# Altium schematic symbol library MicroProcessor.SchLib: 9 symbols (part 4 of 4)
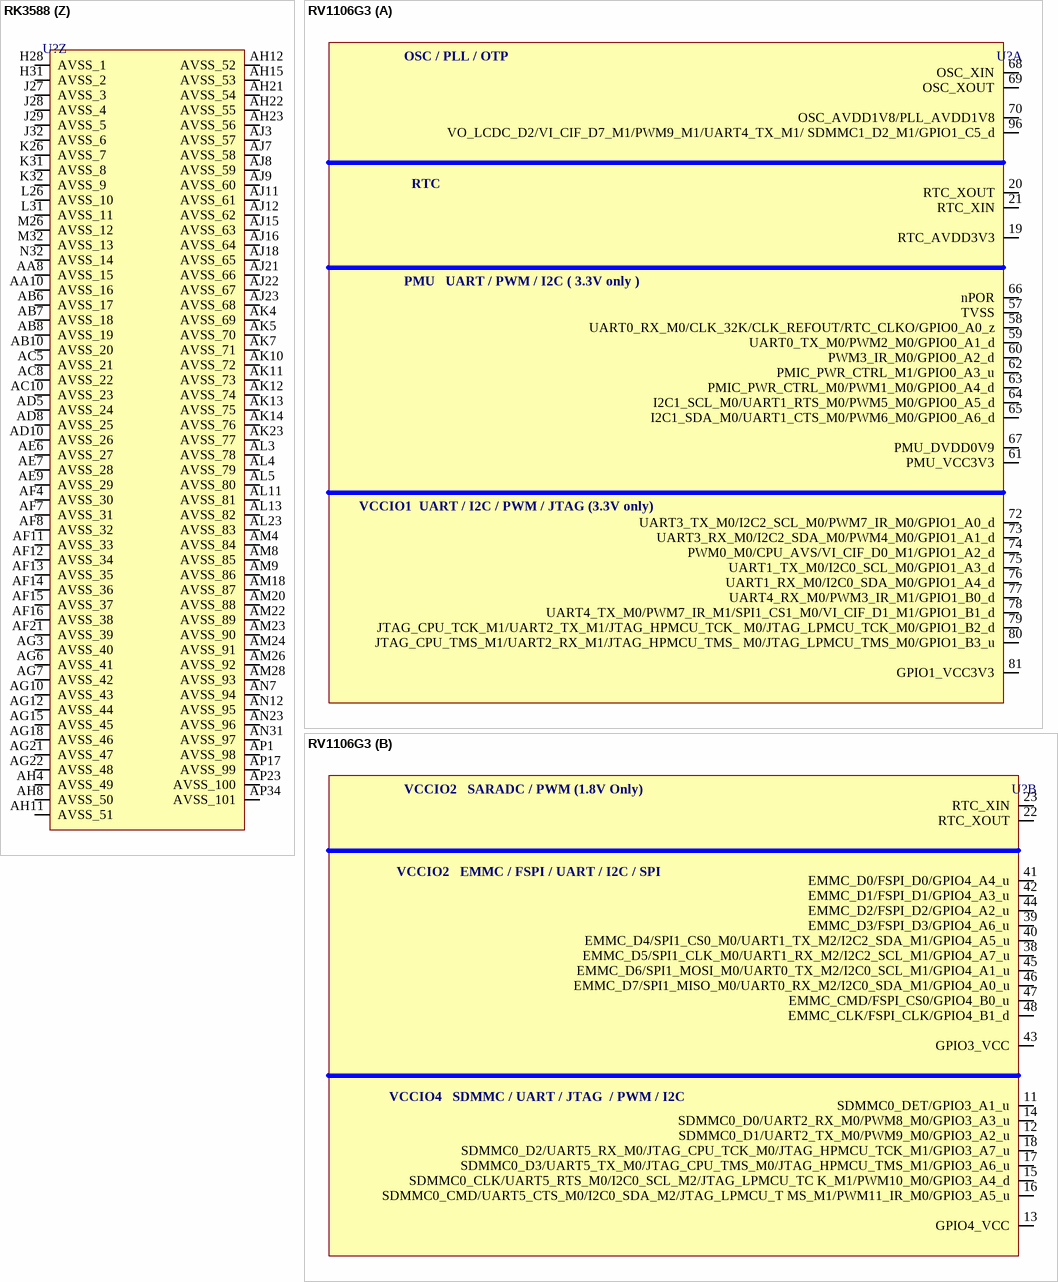
[diagram p32: symbols RK3588 to RV1106G3]

## RK3588
designator U?
Power Management IC; Manufacturer Part Number: RK3588LP4XEVB; Manufacturer: Rockchip; LCSC Part Number: *; Item Type: IC
footprint FCBGA-1088L
part A pins: AA1 DDR_CH0_DQ14_A, AA2 DDR_CH0_DQ15_A, AA4 DDR_CH0_DQS1N_A, AA5 DDR_CH0_DQS1P_A, AB1 DDR_CH0_DQ9_A, AB2 DDR_CH0_DQ8_A, AB4 DDR_CH0_DM1_A, AC1 DDR_CH0_DQ10_A, AC2 DDR_CH0_DQ11_A, B1       DDR_CH0_DQ11_B, C1       DDR_CH0_DQ9_B, C2       DDR_CH0_DQ10_B, D1       DDR_CH0_DQ15_B, D2       DDR_CH0_DQ8_B, E1       DDR_CH0_DQ13_B, E2       DDR_CH0_DQ14_B, E4 DDR_CH0_DM1_B, F1       DDR_CH0_DQ4_B, F2       DDR_CH0_DQ12_B, F4 DDR_CH0_DQS1N_B, F5 DDR_CH0_DQS1P_B, G1      DDR_CH0_DQ6_B, G2      DDR_CH0_DQ5_B, G4 DDR_CH0_DM0_B, H1       DDR_CH0_DQ0_B, H2       DDR_CH0_DQ7_B, H4 DDR_CH0_WCK1P_B, H5 DDR_CH0_WCK1N_B, H7 DDR_CH0_ZQ_B, J1       DDR_CH0_DQ2_B, J2       DDR_CH0_DQ1_B, J7 DDR_CH0_DQS0N_B, J8 DDR_CH0_DQS0P_B, K1 DDR_CH0_A4_B, K2       DDR_CH0_DQ3_B, K4 DDR_CH0_WCK0N_B, K5 DDR_CH0_WCK0P_B, K7 DDR_CH0_RESET_B, L2 DDR_CH0_A5_B, L4 DDR_CH0_LP4/4X_CKE1/LP5_CS1_B, L5 DDR_CH0_LP4/4X_CKE0/LP5_CS0_B, L7 DDR_CH0_LP4/4X_CS0_B, L8 DDR_CH0_LP4/4X_CS1_B, L10 DDR_CH0_VDDQ_CK, M1 DDR_CH0_CKB_B, M2 DDR_CH0_CK_B, M5 DDR_CH0_A1_B, M7 DDR_CH0_A6_B, M8 DDR_CH0_A0_B, M10 DDR_CH0_VDDQ_0, M11 DDR_CH0_PLL_AVSS, M12 DDR_CH0_PLL_AVDD1V8, N1 DDR_CH0_CKB_A, N2 DDR_CH0_CK_A, N4 DDR_CH0_A3_B, N5 DDR_CH0_A2_B, N7 DDR_CH0_LP4/4X_CKE1/LP5_CS1_A, N8 DDR_CH0_VDDQ_CKE, N10 DDR_CH0_VDDQ_1, N12 DDR_CH0_PLL_DVDD, N13 DDR_CH0_VDD_MIF_0, P2 DDR_CH0_A5_A, P4 DDR_CH0_A2_A, P5 DDR_CH0_A3_A, P7 DDR_CH0_LP4/4X_CKE0/LP5_CS0_A, P10 DDR_CH0_VDDQ_2, P12 DDR_CH0_VDD_3, P13 DDR_CH0_VDD_MIF_1, R1 DDR_CH0_A4_A, R2 DDR_CH0_DQ3_A, R6 DDR_CH0_LP4/4X_CS0_A, R7 DDR_CH0_LP4/4X_CS1_A, R10 DDR_CH0_VDDQ_3, R12 DDR_CH0_VDD_2, T1 DDR_CH0_DQ2_A, T2 DDR_CH0_DQ1_A, T4 DDR_CH0_RESET_A, T5 DDR_CH0_A6_A, T7 DDR_CH0_A0_A, T8 DDR_CH0_A1_A, T10 DDR_CH0_VDDQ_4, T12 DDR_CH0_VDD_1, U1 DDR_CH0_DQ0_A, U2 DDR_CH0_DQ7_A, U4 DDR_CH0_DQS0N_A, U5 DDR_CH0_DQS0P_A, U11 DDR_CH0_VDD_0, V1 DDR_CH0_DQ6_A, V2 DDR_CH0_DQ5_A, V6 DDR_CH0_WCK0N_A, V7 DDR_CH0_WCK0P_A, W1 DDR_CH0_DQ4_A, W4 DDR_CH0_WCK1P_A, W5 DDR_CH0_WCK1N_A, W8 DDR_CH0_ZQ_A, Y1 DDR_CH0_DQ12_A, Y2 DDR_CH0_DQ13_A, Y4 DDR_CH0_DM0_A 
part B pins: A2 DDR_CH1_DQ10_C, A3 DDR_CH1_DQ8_C, A4 DDR_CH1_DQ14_C, A5 DDR_CH1_DQ12_C, A6 DDR_CH1_DQ4_C, A7 DDR_CH1_DQ6_C, A8 DDR_CH1_DQ0_C, A9 DDR_CH1_DQ2_C, A10 DDR_CH1_A4_C, A12 DDR_CH1_CKB_C, A13 DDR_CH1_CKB_D, A15 DDR_CH1_A4_D, A16 DDR_CH1_DQ2_D, A17 DDR_CH1_DQ0_D, A18 DDR_CH1_DQ6_D, A19 DDR_CH1_DQ4_D, A20 DDR_CH1_DQ12_D, A21 DDR_CH1_DQ14_D, A22 DDR_CH1_DQ8_D, A23 DDR_CH1_DQ10_D, B2 DDR_CH1_DQ11_C, B3 DDR_CH1_DQ9_C, B4 DDR_CH1_DQ15_C, B5 DDR_CH1_DQ13_C, B7 DDR_CH1_DQ5_C, B8 DDR_CH1_DQ7_C, B9 DDR_CH1_DQ1_C, B10 DDR_CH1_DQ3_C, B11 DDR_CH1_A5_C, B12 DDR_CH1_CK_C, B13 DDR_CH1_CK_D, B14 DDR_CH1_A5_D, B15 DDR_CH1_DQ3_D, B16 DDR_CH1_DQ1_D, B17 DDR_CH1_DQ7_D, B18 DDR_CH1_DQ5_D, B20 DDR_CH1_DQ13_D, B21 DDR_CH1_DQ15_D, B22 DDR_CH1_DQ9_D, B23 DDR_CH1_DQ11_D, C19 DDR_CH1_RESET_D, D4 DDR_CH1_DM1_C, D5 DDR_CH1_DQS1N_C, D7 DDR_CH1_WCK1P_C, D9 DDR_CH1_DQS0N_C, D10 DDR_CH1_A6_C, D11 DDR_CH1_LP4/4X_CKE0/LP5_CS0_C, D13 DDR_CH1_A3_C, D14 DDR_CH1_A6_D, D16 DDR_CH1_LP4/4X_CKE0/LP5_CS0_D, D17 DDR_CH1_WCK0N_D, D19 DDR_CH1_LP4/4X_CS1_D, D20 DDR_CH1_DM0_D, D21 DDR_CH1_DQS1P_D, D22 DDR_CH1_DM1_D, E5 DDR_CH1_DQS1P_C, E7 DDR_CH1_WCK1N_C, E9 DDR_CH1_DQS0P_C, E10 DDR_CH1_RESET_C, E11 DDR_CH1_LP4/4X_CKE1/LP5_CS1_C, E13 DDR_CH1_A2_C, E14 DDR_CH1_A3_D, E16 DDR_CH1_LP4/4X_CKE1/LP5_CS1_D, E17 DDR_CH1_WCK0P_D, E19 DDR_CH1_LP4/4X_CS0_D, E21 DDR_CH1_DQS1N_D, F8 DDR_CH1_DM0_C, F12 DDR_CH1_A1_C, F18 DDR_CH1_ZQ_D, G8 DDR_CH1_ZQ_C, G9 DDR_CH1_WCK0P_C, G11 DDR_CH1_LP4/4X_CS0_C, G12 DDR_CH1_A0_C, G13 DDR_CH1_A2_D, G14 DDR_CH1_A1_D, G16 DDR_CH1_DQS0N_D, G18 DDR_CH1_WCK1N_D, H9 DDR_CH1_WCK0N_C, H11 DDR_CH1_LP4/4X_CS1_C, H13 DDR_CH1_VDDQ_CKE, H15 DDR_CH1_A0_D, H16 DDR_CH1_DQS0P_D, H18 DDR_CH1_WCK1P_D, K11 DDR_CH1_VDDQ_1, K12 DDR_CH1_VDDQ_0, K13 DDR_CH1_VDDQ_2, K14 DDR_CH1_VDDQ_3, K15 DDR_CH1_VDDQ_4, K16 DDR_CH1_PLL_AVDD1V8, L11 DDR_CH1_VDD_0, L12 DDR_CH1_VDD_1, L13 DDR_CH1_VDD_2, L14 DDR_CH1_VDD_3, L15 DDR_CH1_PLL_DVDD, L16 DDR_CH1_PLL_AVSS, L17 DDR_CH1_VDD_MIF_0, L18 DDR_CH1_VDD_MIF_1, M13 DDR_CH1_VDDQ_CK
part C pins: AA32 EMMC_D5/I2C1_SDA_M3/UART5_TX_M2/GPIO2_D5_u, AA33 EMMC_D3/FSPI_D3_M0/GPIO2_D3_u, AA34 EMMC_RSTN/I2C2_SCL_M2/UART5_RTSN_M1/GPIO2_A3_d, V26 EMMCIO_1V8, V32 EMMC_D2/FSPI_D2_M0/GPIO2_D2_u, V33 EMMC_D7/FSPI_CS1N_M0/GPIO2_D7_u, V34 EMMC_CLKOUT/GPIO2_A1_d, W32 EMMC_D6/FSPI_CS0N_M0/GPIO2_D6_u, W33 EMMC_D1/FSPI_D1_M0/GPIO2_D1_u, W34 EMMC_CMD/FSPI_CLK_M0/GPIO2_A0_u, Y32 EMMC_D4/I2C1_SCL_M3/UART5_RX_M2/GPIO2_D4_u, Y33 EMMC_D0/FSPI_D0_M0/GPIO2_D0_u, Y34 EMMC_DATA_STROBE/I2C2_SDA_M2/UART5_CTSN_M1/GPIO2_A2_d
part D pins: AA7 VCCIO2_1V8, AD1 SDMMC_D1/PDM1_SDI2_M0/JTAG_TMS_M1/I2C3_SDA_M4/UART2_RX_M1/PWM9_M1/GPIO4_D1_u, AD2 SDMMC_D0/PDM1_SDI3_M0/JTAG_TCK_M1/I2C3_SCL_M4/UART2_TX_M1/PWM8_M1/GPIO4_D0_u, AE1 SDMMC_CLK/PDM1_CLK0_M0/TEST_CLKOUT_M0/MCU_JTAG_TMS_M0/CAN0_RX_M1/UART5_TX_M0/GPIO4_D5_d, AE2 SDMMC_CMD/PDM1_CLK1_M0/MCU_JTAG_TCK_M0/CAN0_TX_M1/UART5_RX_M0/PWM7_IR_M1/GPIO4_D4_u, AF1 SDMMC_D3/PDM1_SDI0_M0/JTAG_TMS_M0/I2C8_SDA_M0/UART5_RTSN_M0/PWM10_M1/GPIO4_D3_u, AF2 SDMMC_D2/PDM1_SDI1_M0/JTAG_TCK_M0/I2C8_SCL_M0/UART5_CTSN_M0/GPIO4_D2_u, Y7 VCCIO2
part E pins: K29 CLK32K_IN/CLK32K_OUT0/GPIO0_B2__u, K30 SPI2_CS0_M2/I2C1_SDA_M1/PWM5_M0/UART0_TX_M1/GPIO0_B1_z, L29 SPI2_MISO_M2/I2C0_SCL_M0/GPIO0_B3_z, L30 SPI2_CS1_M2/I2C1_SCL_M1/UART0_RX_M1/GPIO0_B0_z, M29 TVSS, M30 PMIC_INT_L/GPIO0_A7_u, M31 NPOR, N27 OSC_1V8, N28 PMUIO1_1V8, N30 SPI2_MOSI_M2/I2C0_SDA_M0/GPIO0_A6_z, N31 SPI2_CLK_M2/SDMMC_PWREN/PMU_DEBUG/GPIO0_A5_d, P27 PMU_0V75, P31 SDMMC_DET/GPIO0_A4_u, P32 TSADC_SHUT_ORG/TSADC_SHUT/GPIO0_A1_z, P33 REFCLK_OUT/GPIO0_A0_d, R31 PMIC_SLEEP2/GPIO0_A3_d, R32 PMIC_SLEEP1/GPIO0_A2_d, R34 XIN_24M, T34 XOUT_24M, U18 PLL_AVDD1V8, U19 PLL_AVSS, V20 PLL_DVDD0V75
part F pins: P28 PMUIO2, P29 I2S1_MCLK_M1/JTAG_TCK_M2/I2C1_SCL_M0/UART2_TX_M0/PCIE30X1_1_CLKREQN_M0/GPIO0_B5_d, P30 I2S1_SDI0_M1/GPU_AVS/UART0_TX_M0/I2C4_SCL_M2/DP1_HPDIN_M1/PWM4_M0/PCIE30X1_0_PERSTN_M0/GPIO0_C5_u, R27 PMUIO2_1V8, R29 I2S1_SCLK_M1/JTAG_TMS_M2/I2C1_SDA_M0/UART2_RX_M0/PCIE30X1_1_WAKEN_M0/GPIO0_B6_d, R30 PDM0_CLK1_M1/PWM2_M0/UART0_RX_M0/I2C4_SDA_M2/DP0_HPDIN_M1/PCIE30X1_0_WAKEN_M0/GPIO0_C4_d, T28 I2S1_LRCK_M1/PWM0_M0/I2C2_SCL_M0/CAN0_TX_M0/SPI0_CS1_M0/PCIE30X1_1_PERSTN_M0/GPIO0_B7_d, T29 I2S1_SDI1_M1/NPU_AVS/UART0_RTSN/PWM5_M1/SPI0_CLK_M0/PCIE30X4_CLKREQN_M0/SATA_CP_POD/GPIO0_C6_u, T30 PMIC_SLEEP5/GPIO0_C3_d, T31 PDM0_CLK0_M1/PWM1_M0/I2C2_SDA_M0/CAN0_RX_M0/SPI0_MOSI_M0/PCIE30X1_0_CLKREQN_M0/GPIO0_C0_d, T32 PMIC_SLEEP4/GPIO0_C2_d, U32 PMIC_SLEEP3/GPIO0_C1_d, U33 LITCPU_AVS/SPI3_CLK_M2/GPIO0_D3_u, V28 I2S1_SDO3_M1/CPU_BIG1_AVS/I2C1_SDA_M2/CAN2_TX_M1/HDMI_TX0_SCL_M1/SPI3_CS1_M2/SATA_MP_SWITCH/GPIO0_D5_u, V29 I2S1_SDO2_M1/PDM0_SDI2_M1/PWM3_IR_M0/I2C1_SCL_M2/CAN2_RX_M1/HDMI_TX0_SDA_M1/SPI3_CS0_M2/PCIE30X2_PERSTN_M0/SATA_CPDET/GPIO0_D4_u, V31 I2S1_SDI2_M1/PDM0_SDI0_M1/I2C6_SDA_M0/UART1_RTSN_M2/PWM6_M0/SPI0_MISO_M0/PCIE30X4_WAKEN_M0/GPIO0_C7_d, W28 PMIC_SLEEP6/PDM0_SDI3_M1/GPIO0_D6_d, W29 I2S1_SDO1_M1/I2C0_SDA_M2/UART1_RX_M2/HDMI_RX_SCL_M0/SPI3_MOSI_M2/PCIE30X2_WAKEN_M0/HDMI_TX1_CEC_M1/GPIO0_D2_u, W30 I2S1_SDO0_M1/CPU_BIG0_AVS/I2C0_SCL_M2/UART0_CTSN/UART1_TX_M2/HDMI_RX_SDA_M0/SPI0_CS0_M0/PCIE30X2_CLKREQN_M0/HDMI_TX0_CEC_M1/GPIO0_D1_u, W31 I2S1_SDI3_M1/PDM0_SDI1_M1/I2C6_SCL_M0/UART1_CTSN_M2/PWM7_IR_M0/SPI3_MISO_M2/PCIE30X4_PERSTN_M0/GPIO0_D0_d
part G pins: D28 I2S0_SDI0/GPIO1_D4_d, D29 PDM0_CLK0_M0/I2C4_SDA_M4/PWM15_IR_M2/GPIO1_C6_d, D30 I2S0_LRCK/I2C2_SCL_M3/UART4_RTSN/GPIO1_C5_d, E28 I2S0_SDI1/PDM0_SDI3_M0/I2C1_SDA_M4/UART4_RX_M0/PWM1_M1/SPI1_CS0_M2/GPIO1_D3_d, E29 I2S0_SDO0/I2C4_SCL_M4/UART4_CTSN/GPIO1_C7_d, E30 PDM0_CLK1_M0/I2C2_SDA_M3/PWM11_IR_M2/SPI4_CS1_M0/GPIO1_C4_d, E31 I2S0_SCLK/I2C6_SCL_M1/UART3_CTSN/PWM7_IR_M2/SPI4_CS0_M0/GPIO1_C3_d, F26 I2S0_SDO1/I2C7_SCL_M0/UART6_TX_M2/SPI1_MISO_M2/GPIO1_D0_d, F27 I2S0_SDO2/I2S0_SDI3/PDM0_SDI1_M0/I2C7_SDA_M0/UART6_RX_M2/SPI1_MOSI_M2/GPIO1_D1_d, F28 I2S0_SDO3/I2S0_SDI2/PDM0_SDI2_M0/I2C1_SCL_M4/UART4_TX_M0/PWM0_M1/SPI1_CLK_M2/GPIO1_D2_d, F30 I2S0_MCLK/I2C6_SDA_M1/UART3_RTSN/PWM3_IR_M2/SPI4_CLK_M0/GPIO1_C2_d, G20 VCCIO1_1V8, G26 PDM0_SDI0_M0/SPI1_CS1_M2/GPIO1_D5_d, G27 I2C3_SCL_M0/UART3_TX_M0/SPI4_MOSI_M0/GPIO1_C1_z, G29 I2C3_SDA_M0/UART3_RX_M0/SPI4_MISO_M0/GPIO1_C0_z
part H pins: AB30 GMAC0_PPSTRIG/FSPI_CS1N_M1/HDMI_TX1_SCL_M0/I2C4_SCL_M1/UART7_TX_M0/GPIO2_B5_u, AB31 GMAC0_PTP_REFCLK/FSPI_CS0N_M1/HDMI_TX1_SDA_M0/I2C4_SDA_M1/UART7_RX_M0/GPIO2_B4_u, AB33 GMAC0_MDIO/I2C0_SCL_M1/UART9_CTSN_M0/PWM6_M2/SPI3_MOSI_M0/GPIO4_C5_d, AB34 GMAC0_MDC/I2C7_SDA_M1/UART9_RTSN_M0/PWM5_M2/SPI3_MISO_M0/GPIO4_C4_d, AC30 GMAC0_PPSCLK/TEST_CLKOUT_M1/HDMI_TX1_CEC_M0/UART9_RX_M0/SPI1_CS1_M0/GPIO2_C4_d, AC31 GMAC0_RXD3/SDIO_D1_M0/FSPI_D1_M1/UART6_TX_M0/GPIO2_A7_u, AC32 GMAC0_RXD2/SDIO_D0_M0/FSPI_D0_M1/UART6_RX_M0/GPIO2_A6_u, AC33 GMAC0_TXD2/SDIO_D3_M0/FSPI_D3_M1/I2C8_SDA_M1/UART6_CTSN_M0/GPIO2_B1_u, AC34 GMAC0_TXD3/SDIO_CMD_M0/I2C3_SCL_M3/GPIO2_B2_u, AD30 ETH0_REFCLKO_25M/I2S2_SDI_M0/I2C6_SCL_M2/SPI1_CS0_M0/GPIO2_C3_d, AD31 GMAC0_RXD1/I2C6_SDA_M2/UART9_TX_M0/SPI1_MOSI_M0/GPIO2_C2_d, AD32 GMAC0_RXD0/I2C2_SCL_M1/UART1_CTSN_M0/SPI1_MISO_M0/GPIO2_C1_d, AD33 GMAC0_TXD0/I2S2_MCLK_M0/I2C5_SCL_M4/UART1_RX_M0/GPIO2_B6_d, AD34 GMAC0_TXD1/I2S2_SCLK_M0/I2C5_SDA_M4/UART1_TX_M0/GPIO2_B7_d, AE30 CLK32K_OUT1/GPIO2_C5_d, AE31 GMAC0_RXDV_CRS/UART7_RTSN_M0/PWM2_M2/SPI3_CS0_M0/GPIO4_C2_d, AE32 GMAC0_RXCLK/SDIO_D2_M0/FSPI_D2_M1/I2C8_SCL_M1/UART6_RTSN_M0/GPIO2_B0_u, AE33 GMAC0_TXCLK/SDIO_CLK_M0/FSPI_CLK_M1/I2C3_SDA_M3/GPIO2_B3_d, AE34 GMAC0_TXEN/I2S2_LRCK_M0/I2C2_SDA_M1/UART1_RTSN_M0/SPI1_CLK_M0/GPIO2_C0_d, AF33 GMAC0_TXER/I2C0_SDA_M1/UART7_CTSN_M0/PWM7_IR_M3/SPI3_CLK_M0/GPIO4_C6_d, AF34 GMAC0_MCLKINOUT/I2S2_SDO_M0/I2C7_SCL_M1/PWM4_M1/SPI3_CS1_M0/GPIO4_C3_d, Y26 VCCIO3_1V8
part I pins: A24 PCIE30X1_1_CLKREQN_M2/DP0_HPDIN_M2/I2C2_SDA_M4/UART6_RX_M1/SPI4_MISO_M2/GPIO1_A0_d, A25 PCIE30X1_1_WAKEN_M2/DP1_HPDIN_M2/SATA1_ACT_LED_M1/I2C2_SCL_M4/UART6_TX_M1/SPI4_MOSI_M2/GPIO1_A1_d, A26 VOP_POST_EMPTY/I2C4_SDA_M3/UART6_RTSN_M1/PWM0_M2/SPI4_CLK_M2/GPIO1_A2_d, A27 HDMI_TX1_SDA_M2/I2C4_SCL_M3/UART6_CTSN_M1/PWM1_M2/SPI4_CS0_M2/GPIO1_A3_d, B25 HDMI_TX1_SCL_M2/SPI2_MISO_M0/GPIO1_A4_d, B26 HDMI_TX0_HPD_M0/SPI2_MOSI_M0/GPIO1_A5_d, C24 HDMI_TX1_HPD_M0/SPI2_CLK_M0/GPIO1_A6_d, C25 PDM1_SDI0_M1/PCIE30X1_1_PERSTN_M2/PWM3_IR_M3/SPI2_CS0_M0/GPIO1_A7_u, C27 PDM1_SDI1_M1/PCIE30X4_CLKREQN_M3/SPI2_CS1_M0/GPIO1_B0_u, D25 PDM1_SDI2_M1/PCIE30X4_WAKEN_M3/SPI0_MISO_M2/GPIO1_B1_d, D26 PDM1_SDI3_M1/PCIE30X4_PERSTN_M3/UART4_RX_M2/SPI0_MOSI_M2/GPIO1_B2_d, D27 PDM1_CLK1_M1/PCIE30X1_0_WAKEN_M2/SATA0_ACT_LED_M1/UART4_TX_M2/SPI0_CLK_M2/GPIO1_B3_d, E24 PDM1_CLK0_M1/PCIE30X1_0_PERSTN_M2/UART7_RX_M2/SPI0_CS0_M2/GPIO1_B4_u, E25 PCIE30X1_0_CLKREQN_M2/UART7_TX_M2/SPI0_CS1_M2/GPIO1_B5_u, E26 MIPI_CAMERA1_CLK_M0/SPDIF0_TX_M0/PCIE30X2_WAKEN_M3/HDMI_RX_HPDOUT_M2/I2C5_SCL_M3/UART1_TX_M1/GPIO1_B6_u, E27 MIPI_CAMERA2_CLK_M0/SPDIF1_TX_M0/PCIE30X2_PERSTN_M3/HDMI_RX_CEC_M2/SATA2_ACT_LED_M1/I2C5_SDA_M3/UART1_RX_M1/PWM13_M2/GPIO1_B7_u, F24 MIPI_CAMERA3_CLK_M0/HDMI_RX_SCL_M2/I2C8_SCL_M2/UART1_RTSN_M1/PWM14_M2/GPIO1_D6_u, F25 MIPI_CAMERA4_CLK_M0/PCIE30X2_CLKREQN_M3/HDMI_RX_SDA_M2/I2C8_SDA_M2/UART1_CTSN_M1/PWM15_IR_M3/GPIO1_D7_u, H20 VCCIO4_1V8, H21 VCCIO4
part J pins: AA27 HDMI_TX0_HPD_M1/PCIE30X2_PERSTN_M2/HDMI_RX_HPDOUT_M1/MCU_JTAG_TCK_M1/UART9_RX_M2/SPI0_CS0_M3/GPIO3_D4_d, AA28 GMAC1_PTP_REF_CLK/HDMI_TX1_HPD_M1/I2C3_SCL_M1/SPI1_MOSI_M1/GPIO3_B7_d, AA29 GMAC1_TXD2/SDIO_D0_M1/I2S3_MCLK/FSPI_D0_M2/I2C6_SDA_M4/PWM10_M0/SPI4_MISO_M1/GPIO3_A0_u, AA30 GMAC1_TXD3/SDIO_D1_M1/I2S3_SCLK/AUDDSM_LN/FSPI_D1_M2/I2C6_SCL_M4/PWM11_IR_M0/SPI4_MOSI_M1/GPIO3_A1_u, AB28 PCIE30X4_BUTTON_RSTN/DP1_HPDIN_M0/MCU_JTAG_TMS_M1/UART9_TX_M2/PWM11_IR_M3/SPI0_CS1_M3/GPIO3_D5_d, AC28 GMAC1_TXD0/I2S2_SDO_M1/UART2_RTSN/GPIO3_B3_u, AC29 GMAC1_TXD1/I2S2_MCLK_M1/UART2_CTSN/GPIO3_B4_u, AD27 GMAC1_RXD2/SDIO_D2_M1/I2S3_LRCK/AUDDSM_LP/FSPI_D2_M2/UART8_TX_M1/SPI4_CLK_M1/GPIO3_A2_u, AD28 GMAC1_TXCLK/SDIO_CMD_M1/I2S3_SDI/AUDDSM_RP/UART8_RTSN_M1/SPI4_CS1_M1/GPIO3_A4_d, AD29 GMAC1_TXEN/I2S2_SCLK_M1/CAN1_RX_M0/UART3_TX_M1/PWM12_M0/GPIO3_B5_u, AE27 GMAC1_RXD3/SDIO_D3_M1/I2S3_SDO/AUDDSM_RN/FSPI_D3_M2/UART8_RX_M1/SPI4_CS0_M1/GPIO3_A3_u, AE28 GMAC1_TXER/I2S2_SDI_M1/UART2_RX_M2/PWM3_IR_M1/GPIO3_B2_d, AE29 GMAC1_MCLKINOUT/I2S2_LRCK_M1/CAN1_TX_M0/UART3_RX_M1/PWM13_M0/GPIO3_B6_d, AG23 CIF_D13/PCIE20X1_2_PERSTN_M0/HDMI_RX_CEC_M1/UART4_TX_M1/PWM9_M2/SPI0_MISO_M3/GPIO3_D1_d, AG24 CIF_D15/PCIE30X2_WAKEN_M2/HDMI_RX_SDA_M1/I2C7_SDA_M2/UART9_CTSN_M2/PWM10_M2/SPI0_CLK_M3/GPIO3_D3_d, AG25 CIF_D14/PCIE30X2_CLKREQN_M2/HDMI_RX_SCL_M1/I2C7_SCL_M2/UART9_RTSN_M2/SPI0_MOSI_M3/GPIO3_D2_d, AG26 CIF_D10/PCIE30X4_PERSTN_M2/HDMI_TX1_SCL_M1/SPI3_MISO_M3/GPIO3_C6_u, AG28 GMAC1_RXD1/MIPI_CAMERA3_CLK_M1/PWM9_M0/GPIO3_B0_u, AG29 GMAC1_RXD0/MIPI_CAMERA2_CLK_M1/PWM8_M0/GPIO3_A7_u, AH24 CIF_D12/PCIE20X1_2_WAKEN_M0/HDMI_TX0_SDA_M2/I2C5_SDA_M0/UART4_RX_M1/PWM8_M2/SPI3_CLK_M3/GPIO3_D0_u, AH25 CIF_D9/FSPI_CS1N_M2/PCIE30X4_WAKEN_M2/HDMI_TX1_SDA_M1/CAN2_TX_M0/UART5_RX_M1/SPI3_CS1_M3/GPIO3_C5_u, AH26 CIF_D8/FSPI_CS0N_M2/PCIE30X4_CLKREQN_M2/HDMI_TX1_CEC_M2/CAN2_RX_M0/UART5_TX_M1/SPI3_CS0_M3/GPIO3_C4_u, AH27 ETH1_REFCLKO_25M/MIPI_CAMERA1_CLK_M1/I2C4_SCL_M0/GPIO3_A6_d, AH29 GMAC1_RXDV_CRS/MIPI_CAMERA4_CLK_M1/UART2_TX_M2/PWM2_M1/GPIO3_B1_d, AH30 GMAC1_RXCLK/SDIO_CLK_M1/MIPI_CAMERA0_CLK_M1/FSPI_CLK_M2/I2C4_SDA_M0/UART8_CTSN_M1/GPIO3_A5_d, AJ24 CIF_D11/PCIE20X1_2_CLKREQN_M0/HDMI_TX0_SCL_M2/I2C5_SCL_M0/SPI3_MOSI_M3/GPIO3_C7_u, W25 VCCIO5_1V8, W26 VCCIO5, Y27 GMAC1_PPSCLK/PCIE30X2_BUTTON_RSTN/UART7_RX_M1/SPI1_CLK_M1/GPIO3_C1_d, Y29 GMAC1_PPSTRIG/I2C3_SDA_M1/UART7_TX_M1/SPI1_MISO_M1/GPIO3_C0_d, Y30 GMAC1_MDIO/MIPI_TE1/I2C8_SDA_M4/UART7_CTSN_M1/PWM15_IR_M0/SPI1_CS1_M1/GPIO3_C3_d, Y31 GMAC1_MDC/MIPI_TE0/I2C8_SCL_M4/UART7_RTSN_M1/PWM14_M0/SPI1_CS0_M1/GPIO3_C2_d
part K pins: AC25 VCCIO6_1V8, AC26 VCCIO6, AJ25 BT1120_D14/PCIE20X1_2_WAKEN_M1/HDMI_TX0_SDA_M0/I2C8_SCL_M3/SPI3_CS0_M1/GPIO4_C0_u, AJ26 BT1120_D11/PCIE30X4_WAKEN_M1/HDMI_RX_CEC_M0/SATA1_ACT_LED_M0/UART9_RX_M1/PWM12_M1/SPI3_MISO_M1/GPIO4_B5_d, AJ27 BT1120_D12/PCIE30X4_PERSTN_M1/HDMI_RX_HPDOUT_M0/SATA0_ACT_LED_M0/I2C5_SCL_M1/PWM13_M1/SPI3_MOSI_M1/GPIO4_B6_d, AJ28 BT1120_D13/PCIE20X1_2_CLKREQN_M1/HDMI_TX0_SCL_M0/I2C5_SDA_M1/SPI3_CLK_M1/GPIO4_B7_u, AK24 BT1120_D15/SPDIF1_TX_M2/PCIE20X1_2_PERSTN_M1/HDMI_TX0_CEC_M0/I2C8_SDA_M3/PWM6_M1/SPI3_CS1_M1/GPIO4_C1_d, AK25 CIF_HREF/BT1120_D8/I2S1_SDO1_M0/PCIE30X1_1_BUTTON_RSTN/I2C7_SCL_M3/UART8_RTSN_M0/PWM14_M1/SPI0_CS0_M1/CAN1_RX_M1/GPIO4_B2_u, AK26 CIF_CLKIN/BT1120_CLKOUT/I2S1_SDI3_M0/PCIE30X2_PERSTN_M1/I2C6_SDA_M3/UART8_TX_M0/SPI2_CS1_M1/GPIO4_B0_d, AK27 CIF_D5/BT1120_D5/I2S1_SDI0_M0/PCIE30X1_0_PERSTN_M1/I2C3_SDA_M2/UART3_TX_M2/SPI2_MOSI_M1/GPIO4_A5_d, AK30 CIF_D0/BT1120_D0/I2S1_MCLK_M0/PCIE30X1_1_CLKREQN_M1/UART9_RTSN_M1/SPI0_MISO_M1/GPIO4_A0_d, AL24 MIPI_CAMERA0_CLK_M0/SPDIF1_TX_M1/I2S1_SDO0_M0/PCIE30X1_0_BUTTON_RSTN/SATA2_ACT_LED_M0/I2C6_SCL_M3/UART8_RX_M0/SPI0_CS1_M1/GPIO4_B1_u, AL26 CIF_CLKOUT/BT1120_D10/I2S1_SDO3_M0/PCIE30X4_CLKREQN_M1/DP0_HPDIN_M0/SPDIF0_TX_M1/UART9_TX_M1/PWM11_IR_M1/GPIO4_B4_u, AL27 CIF_D6/BT1120_D6/I2S1_SDI1_M0/PCIE30X2_CLKREQN_M1/I2C5_SCL_M2/UART3_RX_M2/SPI2_CLK_M1/GPIO4_A6_d, AL28 CIF_D4/BT1120_D4/PCIE30X1_0_WAKEN_M1/I2C3_SCL_M2/UART0_RX_M2/SPI2_MISO_M1/GPIO4_A4_d, AL29 CIF_D3/BT1120_D3/PCIE30X1_0_CLKREQN_M1/UART0_TX_M2/GPIO4_A3_d, AL30 CIF_D1/BT1120_D1/I2S1_SCLK_M0/PCIE30X1_1_WAKEN_M1/UART9_CTSN_M1/SPI0_MOSI_M1/GPIO4_A1_d, AM25 CIF_VSYNC/BT1120_D9/I2S1_SDO2_M0/PCIE20X1_2_BUTTON_RSTN/I2C7_SDA_M3/UART8_CTSN_M0/PWM15_IR_M1/CAN1_TX_M1/GPIO4_B3_u, AM27 CIF_D7/BT1120_D7/I2S1_SDI2_M0/PCIE30X2_WAKEN_M1/I2C5_SDA_M2/SPI2_CS0_M1/GPIO4_A7_d, AM29 CIF_D2/BT1120_D2/I2S1_LRCK_M0/PCIE30X1_1_PERSTN_M1/SPI0_CLK_M1/GPIO4_A2_d
part L pins: AG9 USB20_HOST0_REXT, AG11 USB20_AVDD_1V8, AH9 USB20_HOST1_REXT, AH10 USB20_DVDD_0V75, AJ10 USB20_AVDD_3V3, AK6 USB20_HOST0_DP, AK8 TYPEC1_USB20_OTG_ID, AK9 TYPEC1_USB20_OTG_DP, AL6 USB20_HOST0_DM, AL7 USB20_HOST1_DP, AL8 TYPEC1_USB20_VBUSDET, AL9 TYPEC1_USB20_OTG_DM, AL12 TYPEC0_USB20_OTG_DP, AL14 TYPEC0_USB20_OTG_ID, AM7 USB20_HOST1_DM, AM12 TYPEC0_USB20_OTG_DM, AM14 TYPEC0_USB20_VBUSDET, AP7 TYPEC1_USB20_OTG1_REXT, AP12 TYPEC0_USB20_OTG0_REXT
part M pins: AG13 TYPEC1_DP1_VDDH_1V8, AG14 TYPEC0_DP0_VDDH_1V8, AG16 TYPEC1_DP1_REXT, AH13 TYPEC1_DP1_VDD_0V85, AH14 TYPEC0_DP0_VDDA_0V85, AH16 TYPEC0_DP0_REXT, AJ13 TYPEC1_DP1_VDDA_0V85, AJ14 TYPEC0_DP0_VDD_0V85, AL10 TYPEC1_SBU1/DP1_AUXP, AL15 TYPEC0_SBU1/DP0_AUXP, AM10 TYPEC1_SBU2/DP1_AUXN, AM15 TYPEC0_SBU2/DP0_AUXN, AN8 TYPEC1_SSRX1P/DP1_TX0P, AN9 TYPEC1_SSTX1N/DP1_TX1N, AN10 TYPEC1_SSRX2P/DP1_TX2P, AN11 TYPEC1_SSTX2N/DP1_TX3N, AN13 TYPEC0_SSRX1P/DP0_TX0P, AN14 TYPEC0_SSTX1N/DP0_TX1N, AN15 TYPEC0_SSRX2P/DP0_TX2P, AN16 TYPEC0_SSTX2N/DP0_TX3N, AP8 TYPEC1_SSRX1N/DP1_TX0N, AP9 TYPEC1_SSTX1P/DP1_TX1P, AP10 TYPEC1_SSRX2N/DP1_TX2N, AP11 TYPEC1_SSTX2P/DP1_TX3P, AP13 TYPEC0_SSRX1N/DP0_TX0N, AP14 TYPEC0_SSTX1P/DP0_TX1P, AP15 TYPEC0_SSRX2N/DP0_TX2N, AP16 TYPEC0_SSTX2P/DP0_TX3P
part N pins: G30 PCIE20_2_REFCLKN, G31 PCIE20_2_REFCLKP, H29 PCIE20_2_TXN/SATA30_2_TXN/USB30_2_SSTXN, H30 PCIE20_2_TXP/SATA30_2_TXP/USB30_2_SSTXP, H32 PCIE20_1_REFCLKP, H33 PCIE20_1_REFCLKN, J30 PCIE20_2_RXN/SATA30_2_RXN/USB30_2_SSRXN, J31 PCIE20_2_RXP/SATA30_2_RXP/USB30_2_SSRXP, J33 PCIE20_1_RXP/SATA30_1_RXP, J34 PCIE20_1_RXN/SATA30_1_RXN, K27 PCIE20_SATA30_USB30_2_AVDD_1V8, K28 PCIE20_SATA30_USB30_2_AVDD_0V85, K33 PCIE20_1_TXP/SATA30_1_TXP, K34 PCIE20_1_TXN/SATA30_1_TXN, L27 PCIE20_SATA30_1_AVDD_1V8, L28 PCIE20_SATA30_1_AVDD_0V85, L32 PCIE20_0_REFCLKP, L33 PCIE20_0_REFCLKN, M27 PCIE20_SATA30_0_AVDD_1V8, M28 PCIE20_SATA30_0_AVDD_0V85, M33 PCIE20_0_TXN/SATA30_0_TXN, M34 PCIE20_0_TXP/SATA30_0_TXP, N33 PCIE20_0_RXP/SATA30_0_RXP, N34 PCIE20_0_RXN/SATA30_0_RXN
part O pins: A28 PCIE30_PORT1_REF_CLKP, A30 PCIE30_PORT1_TX0N, A32 PCIE30_PORT1_RX0N, A33 PCIE30_PORT1_RESREF, B28 PCIE30_PORT1_REF_CLKN, B29 PCIE30_PORT1_TX1N, B30 PCIE30_PORT1_TX0P, B31 PCIE30_PORT1_RX1N, B32 PCIE30_PORT1_RX0P, B34 PCIE30_PORT0_RESREF, C29 PCIE30_PORT1_TX1P, C31 PCIE30_PORT1_RX1P, C33 PCIE30_PORT0_TX1P, C34 PCIE30_PORT0_TX1N, D32 PCIE30_PORT0_TX0P, D33 PCIE30_PORT0_TX0N, E33 PCIE30_PORT0_REF_CLKP, E34 PCIE30_PORT0_REF_CLKN, F32 PCIE30_PORT0_RX1P, F33 PCIE30_PORT0_RX1N, G23 PCIE30_PORT0_AVDD1V8, G24 PCIE30_PORT0_AVDD0V75, G33 PCIE30_PORT0_RX0P, G34 PCIE30_PORT0_RX0N, H23 PCIE30_PORT1_AVDD1V8, H24 PCIE30_PORT1_AVDD0V75
part P pins: AA25 MIPI_CSI1_AVCC0V75, AA26 MIPI_CSI1_AVCC1V8, AB25 MIPI_CSI0_AVCC0V75, AB26 MIPI_CSI0_AVCC1V8, AG31 MIPI_CSI1_D0P, AG32 MIPI_CSI1_D0N, AG33 MIPI_CSI0_D0P, AG34 MIPI_CSI0_D0N, AH31 MIPI_CSI1_D1P, AH32 MIPI_CSI1_D1N, AH33 MIPI_CSI0_D1P, AH34 MIPI_CSI0_D1N, AJ31 MIPI_CSI1_CLK0P, AJ32 MIPI_CSI1_CLK0N, AJ33 MIPI_CSI0_CLK0P, AJ34 MIPI_CSI0_CLK0N, AK31 MIPI_CSI1_D2P, AK32 MIPI_CSI1_D2N, AK33 MIPI_CSI0_D2P, AK34 MIPI_CSI0_D2N, AL31 MIPI_CSI1_D3P, AL32 MIPI_CSI1_D3N, AL33 MIPI_CSI0_D3P, AL34 MIPI_CSI0_D3N, AM31 MIPI_CSI1_CLK1P, AM32 MIPI_CSI1_CLK1N, AM33 MIPI_CSI0_CLK1P, AM34 MIPI_CSI0_CLK1N
part Q pins: AF20 MIPI_D/C_PHY0_VREG, AG20 MIPI_D/C_PHY0_VDD, AH20 MIPI_D/C_PHY0_VDD_1V2, AJ20 MIPI_D/C_PHY0_VDD_1V8, AN24 MIPI_DPHY0_TX_D0P/MIPI_CPHY0_TX_TRIO0_B, AN25 MIPI_DPHY0_TX_D1P/MIPI_CPHY0_TX_TRIO1_A, AN26 MIPI_DPHY0_TX_CLKP/MIPI_CPHY0_TX_TRIO1_C, AN27 MIPI_DPHY0_TX_D2P/MIPI_CPHY0_TX_TRIO2_B, AN28 MIPI_DPHY0_TX_D3P/NO_USE, AN29 MIPI_DPHY0_RX_D0P/MIPI_CPHY0_RX_TRIO0_B, AN30 MIPI_DPHY0_RX_D1P/MIPI_CPHY0_RX_TRIO1_A, AN32 MIPI_DPHY0_RX_CLKP/MIPI_CPHY0_RX_TRIO1_C, AN33 MIPI_DPHY0_RX_D2P/MIPI_CPHY0_RX_TRIO2_B, AN34 MIPI_DPHY0_RX_D3P/NO_USE, AP24 MIPI_DPHY0_TX_D0N/MIPI_CPHY0_TX_TRIO0_A, AP25 MIPI_DPHY0_TX_D1N/MIPI_CPHY0_TX_TRIO0_C, AP26 MIPI_DPHY0_TX_CLKN/MIPI_CPHY0_TX_TRIO1_B, AP27 MIPI_DPHY0_TX_D2N/MIPI_CPHY0_TX_TRIO2_A, AP28 MIPI_DPHY0_TX_D3N/MIPI_CPHY0_TX_TRIO2_C, AP29 MIPI_DPHY0_RX_D0N/MIPI_CPHY0_RX_TRIO0_A, AP30 MIPI_DPHY0_RX_D1N/MIPI_CPHY0_RX_TRIO0_C, AP31 MIPI_DPHY0_RX_CLKN/MIPI_CPHY0_RX_TRIO1_B, AP32 MIPI_DPHY0_RX_D2N/MIPI_CPHY0_RX_Trio2_A, AP33 MIPI_DPHY0_RX_D3N/MIPI_CPHY0_RX_TRIO2_C
part R pins: AF19 MIPI_D/C_PHY1_VREG, AG19 MIPI_D/C_PHY1_VDD, AH19 MIPI_D/C_PHY1_VDD_1V2, AJ19 MIPI_D/C_PHY1_VDD_1V8, AK18 MIPI_DPHY1_RX_D0P/MIPI_CPHY1_RX_TRIO0_B, AK19 MIPI_DPHY1_RX_D1P/MIPI_CPHY1_RX_TRIO1_A, AK20 MIPI_DPHY1_RX_CLKP/MIPI_CPHY1_RX_TRIO1_C, AK21 MIPI_DPHY1_RX_D2P/MIPI_CPHY1_RX_TRIO2_B, AK22 MIPI_DPHY1_RX_D3P/NO_USE, AL18 MIPI_DPHY1_RX_D0N/MIPI_CPHY1_RX_TRIO0_A, AL19 MIPI_DPHY1_RX_D1N/MIPI_CPHY1_RX_TRIO0_C, AL20 MIPI_DPHY1_RX_CLKN/MIPI_CPHY1_RX_TRIO1_B, AL21 MIPI_DPHY1_RX_D2N/MIPI_CPHY1_RX_TRIO2_A, AL22 MIPI_DPHY1_RX_D3N/MIPI_CPHY1_RX_TRIO2_C, AN18 MIPI_DPHY1_TX_D0P/MIPI_CPHY1_TX_TRIO0_B, AN19 MIPI_DPHY1_TX_D1P/MIPI_CPHY1_TX_TRIO1_A, AN20 MIPI_DPHY1_TX_CLKP/MIPI_CPHY1_TX_TRIO1_C, AN21 MIPI_DPHY1_TX_D2P/MIPI_CPHY1_TX_TRIO2_B, AN22 MIPI_DPHY1_TX_D3P/NO_USE, AP18 MIPI_DPHY1_TX_D0N/MIPI_CPHY1_TX_TRIO0_A, AP19 MIPI_DPHY1_TX_D1N/MIPI_CPHY1_TX_TRIO0_C, AP20 MIPI_DPHY1_TX_CLKN/MIPI_CPHY1_TX_TRIO1_B, AP21 MIPI_DPHY1_TX_D2N/MIPI_CPHY1_TX_TRIO2_A, AP22 MIPI_DPHY1_TX_D3N/MIPI_CPHY1_TX_TRIO2_C
part S pins: AA9 HDMI/eDP_TX0_VDD_0V75, AB9 HDMI/eDP_TX0_AVDD_0V75, AC6 HDMI/eDP_TX0_VDD_CMN_1V8, AC7 HDMI/eDP_TX0_VDD_IO_1V8, AC9 HDMI/eDP_TX1_AVDD_0V75, AD6 HDMI/eDP_TX1_VDD_CMN_1V8, AD7 HDMI/eDP_TX1_VDD_IO_1V8, AD9 HDMI/eDP_TX1_VDD_0V75, AG1 HDMI_TX0_SBDN/EDP_TX0_AUXN, AG2 HDMI_TX0_SBDP/EDP_TX0_AUXP, AH2 HDMI_TX0_D3N/EDP_TX0_D3N, AH3 HDMI_TX0_D3P/EDP_TX0_D3P, AJ1 HDMI_TX0_D0N/EDP_TX0_D0N, AJ2 HDMI_TX0_D0P/EDP_TX0_D0P, AK2 HDMI_TX0_D1N/EDP_TX0_D1N, AK3 HDMI_TX0_D1P/EDP_TX0_D1P, AL1 HDMI_TX0_D2N/EDP_TX0_D2N, AL2 HDMI_TX0_D2P/EDP_TX0_D2P, AM2 HDMI/eDP_TX0_REXT, AM3 HDMI_TX1_D3P/EDP_TX1_D3P, AM5 HDMI_TX1_D1P/EDP_TX1_D1P, AN1 HDMI/eDP_TX1_REXT, AN2 HDMI_TX1_SBDP/EDP_TX1_AUXP, AN3 HDMI_TX1_D3N/EDP_TX1_D3N, AN4 HDMI_TX1_D0P/EDP_TX1_D0P, AN5 HDMI_TX1_D1N/EDP_TX1_D1N, AN6 HDMI_TX1_D2P/EDP_TX1_D2P, AP2 HDMI_TX1_SBDN/EDP_TX1_AUXN, AP4 HDMI_TX1_D0N/EDP_TX1_D0N, AP6 HDMI_TX1_D2N/EDP_TX1_D2N
part T pins: AE4 HDMI_RX_VPH3V3, AE5 HDMI_RX_DVDD3V3, AE8 HDMI_RX_AVDD0V75, AF3 HDMI_RX_REXT, AF5 HDMI_RX_CLKN, AF6 HDMI_RX_CLKP, AG4 HDMI_RX_D0N, AG5 HDMI_RX_D0P, AH5 HDMI_RX_D1N, AH6 HDMI_RX_D1P, AJ4 HDMI_RX_D2N, AJ5 HDMI_RX_D2P
part U pins: AD3 OTP_VDDOTP_0V75, AD4 NC, AF18 TSADC_TEST_OUT_TS, AH18 SARADC_AVDD_1V8, AK15 SARADC_IN5, AK16 SARADC_IN2, AK17 SARADC_IN7, AL16 SARADC_IN1, AL17 SARADC_IN6, AM16 SARADC_IN0_BOOT, AM17 SARADC_IN4, AN17 SARADC_IN3
part V pins: AA12 VDD_GPU_MEM_0, AA13 VDD_GPU_0, AA14 VDD_GPU_7, AA15 VDD_GPU_11, AB12 VDD_GPU_MEM_1, AB13 VDD_GPU_1, AB14 VDD_GPU_6, AB15 VDD_GPU_10, AB21 VDD_NPU_6, AB22 VDD_NPU_5, AB23 VDD_NPU_2, AC13 VDD_GPU_2, AC14 VDD_GPU_5, AC15 VDD_GPU_9, AC17 VDD_LOGIC_5, AC18 VDD_LOGIC_4, AC19 VDD_LOGIC_3, AC22 VDD_NPU_4, AC23 VDD_NPU_1, AD13 VDD_GPU_3, AD14 VDD_GPU_4, AD15 VDD_GPU_8, AD17 VDD_LOGIC_0, AD18 VDD_LOGIC_1, AD19 VDD_LOGIC_2, AD22 VDD_NPU_3, AD23 VDD_NPU_0, AE22 VDD_NPU_MEM_0, AE23 VDD_NPU_MEM_1, K19 VDD_LOGIC_8, K20 VDD_LOGIC_9, K23 VDD_CPU_BIG1_9, K24 VDD_CPU_BIG1_0, L23 VDD_CPU_BIG1_8, L24 VDD_CPU_BIG1_1, M16 VDD_CPU_BIG0_0, M17 VDD_CPU_BIG0_9, M19 VDD_CPU_BIG0_MEM_0, M21 VDD_CPU_BIG1_MEM_0, M23 VDD_CPU_BIG1_7, M24 VDD_CPU_BIG1_2, N16 VDD_CPU_BIG0_1, N17 VDD_CPU_BIG0_8, N19 VDD_CPU_BIG0_MEM_1, N21 VDD_CPU_BIG1_MEM_1, N23 VDD_CPU_BIG1_6, N24 VDD_CPU_BIG1_3, P16 VDD_CPU_BIG0_2, P17 VDD_CPU_BIG0_7, P23 VDD_CPU_BIG1_5, P24 VDD_CPU_BIG1_4, R14 VDD_VDENC_0, R16 VDD_CPU_BIG0_3, R17 VDD_CPU_BIG0_6, T14 VDD_VDENC_1, T16 VDD_CPU_BIG0_4, T17 VDD_CPU_BIG0_5, T21 VDD_CPU_LIT_MEM_1, T22 VDD_CPU_LIT_MEM_0, U14 VDD_VDENC_2, U21 VDD_CPU_LIT_7, U22 VDD_CPU_LIT_0, V12 VDD_VDENC_MEM_0, V13 VDD_VDENC_MEM_1, V14 VDD_VDENC_3, V16 VDD_LOGIC_6, V17 VDD_LOGIC_7, V21 VDD_CPU_LIT_6, V22 VDD_CPU_LIT_1, W13 VDD_VDENC_5, W14 VDD_VDENC_4, W21 VDD_CPU_LIT_5, W22 VDD_CPU_LIT_2, Y21 VDD_CPU_LIT_4, Y22 VDD_CPU_LIT_3
part W pins: A1 VSS_1, A11 VSS_2, A14 VSS_3, A34 VSS_4, B6 VSS_5, B19 VSS_6, B24 VSS_7, B27 VSS_8, B33 VSS_9, C3 VSS_10, C4 VSS_11, C5 VSS_12, C6 VSS_13, C7 VSS_14, C8 VSS_15, C9 VSS_16, C10 VSS_17, C11 VSS_18, C12 VSS_19, C13 VSS_20, C14 VSS_21, C15 VSS_22, C16 VSS_23, C17 VSS_24, C18 VSS_25, C20 VSS_26, C21 VSS_27, C22 VSS_28, C23 VSS_29, C26 VSS_30, C28 VSS_31, C30 VSS_32, C32 VSS_33, D3 VSS_34, D23 VSS_35, D24 VSS_36, D31 VSS_37, E3 VSS_38, E6 VSS_39, E8 VSS_40, E12 VSS_41, E18 VSS_42, E20 VSS_43, E22 VSS_44, E23 VSS_45, E32 VSS_46, F3 VSS_47, F7 VSS_48, F9 VSS_49, F10 VSS_50, F11 VSS_51, F13 VSS_52, F14 VSS_53, F15 VSS_54, F16 VSS_55, F19 VSS_56, F20 VSS_57, F21 VSS_58, F22 VSS_59, F23 VSS_60, F31 VSS_61, G3 VSS_62, G6 VSS_63, G10 VSS_64, G15 VSS_65, G19 VSS_66, G21 VSS_67, G22 VSS_68, G25 VSS_69, G32 VSS_70, H3 VSS_71, H6 VSS_72, H10 VSS_73, H12 VSS_74, H14 VSS_75, H19 VSS_76, H22 VSS_77, H25 VSS_78, H26 VSS_79, J3 VSS_80, J4 VSS_81, J5 VSS_82, J6 VSS_83, J10 VSS_84, J11 VSS_85, J12 VSS_86, J13 VSS_87, J14 VSS_88, J15 VSS_89, J16 VSS_90, J18 VSS_91, J19 VSS_92, J20 VSS_93, J21 VSS_94, J22 VSS_95, J23 VSS_96, J24 VSS_97, J25 VSS_98, K3 VSS_99, K6 VSS_100, K8 VSS_101, K9 VSS_102, K18 VSS_103, K21 VSS_104, K22 VSS_105, L1 VSS_106
part X pins: L3 VSS_107, L6 VSS_108, L9 VSS_109, L19 VSS_110, L20 VSS_111, L21 VSS_112, L22 VSS_113, L25 VSS_114, M3 VSS_115, M6 VSS_116, M9 VSS_117, M14 VSS_118, M15 VSS_119, M18 VSS_120, M20 VSS_121, M22 VSS_122, M25 VSS_123, N3 VSS_124, N6 VSS_125, N9 VSS_126, N11 VSS_127, N14 VSS_128, N15 VSS_129, N18 VSS_130, N20 VSS_131, N22 VSS_132, N25 VSS_133, N26 VSS_134, N29 VSS_135, P1 VSS_136, P3 VSS_137, P6 VSS_138, P8 VSS_139, P9 VSS_140, P11 VSS_141, P14 VSS_142, P15 VSS_143, P18 VSS_144, P19 VSS_145, P20 VSS_146, P21 VSS_147, P22 VSS_148, P25 VSS_149, P26 VSS_150, P34 VSS_151, R3 VSS_152, R5 VSS_153, R8 VSS_154, R9 VSS_155, R11 VSS_156, R13 VSS_157, R15 VSS_158, R18 VSS_159, R19 VSS_160, R20 VSS_161, R21 VSS_162, R22 VSS_163, R23 VSS_164, R24 VSS_165, R25 VSS_166, R26 VSS_167, R28 VSS_168, R33 VSS_169, T3 VSS_170, T6 VSS_171, T9 VSS_172, T11 VSS_173, T13 VSS_174, T15 VSS_175, T18 VSS_176, T19 VSS_177, T20 VSS_178, T23 VSS_179, T24 VSS_180, T25 VSS_181, T26 VSS_182, T27 VSS_183, T33 VSS_184, U3 VSS_185, U12 VSS_186, U13 VSS_187, U15 VSS_188, U16 VSS_189, U17 VSS_190, U20 VSS_191, U23 VSS_192, U24 VSS_193, U30 VSS_194, U31 VSS_195, U34 VSS_196, V3 VSS_197, V4 VSS_198, V5 VSS_199, V8 VSS_200, V9 VSS_201, V10 VSS_202, V11 VSS_203, V15 VSS_204, V18 VSS_205, V19 VSS_206, V23 VSS_207, V24 VSS_208, V25 VSS_209, V27 VSS_210, V30 VSS_211, W2 VSS_212
part Y pins: AA3 VSS_248, AA6 VSS_249, AA11 VSS_250, AA16 VSS_251, AA17 VSS_252, AA18 VSS_253, AA19 VSS_254, AA20 VSS_255, AA21 VSS_256, AA22 VSS_257, AA23 VSS_258, AA24 VSS_259, AA31 VSS_260, AB3 VSS_261, AB5 VSS_262, AB11 VSS_263, AB16 VSS_264, AB17 VSS_265, AB18 VSS_266, AB19 VSS_267, AB20 VSS_268, AB24 VSS_269, AB27 VSS_270, AB29 VSS_271, AB32 VSS_272, AC3 VSS_273, AC4 VSS_274, AC11 VSS_275, AC12 VSS_276, AC16 VSS_277, AC20 VSS_278, AC21 VSS_279, AC24 VSS_280, AC27 VSS_281, AD11 VSS_282, AD12 VSS_283, AD16 VSS_284, AD20 VSS_285, AD21 VSS_286, AD24 VSS_287, AD25 VSS_288, AD26 VSS_289, AE3 VSS_290, AE11 VSS_291, AE12 VSS_292, AE13 VSS_293, AE14 VSS_294, AE15 VSS_295, AE16 VSS_296, AE18 VSS_297, AE19 VSS_298, AE20 VSS_299, AE21 VSS_300, AE24 VSS_301, AE26 VSS_302, AF22 VSS_303, AF24 VSS_304, AF25 VSS_305, AF27 VSS_306, AF28 VSS_307, AF29 VSS_308, AF30 VSS_309, AF31 VSS_310, AF32 VSS_311, AG30 VSS_312, AJ30 VSS_313, AK28 VSS_314, AK29 VSS_315, AL25 VSS_316, AM30 VSS_317, W3 VSS_213, W6 VSS_214, W7 VSS_215, W9 VSS_216, W10 VSS_217, W11 VSS_218, W12 VSS_219, W15 VSS_220, W16 VSS_221, W17 VSS_222, W18 VSS_223, W19 VSS_224, W20 VSS_225, W23 VSS_226, W24 VSS_227, W27 VSS_228, Y3 VSS_229, Y5 VSS_230, Y6 VSS_231, Y8 VSS_232, Y9 VSS_233, Y10 VSS_234, Y11 VSS_235, Y12 VSS_236, Y13 VSS_237, Y14 VSS_238, Y15 VSS_239, Y16 VSS_240, Y17 VSS_241, Y18 VSS_242, Y19 VSS_243, Y20 VSS_244, Y23 VSS_245, Y24 VSS_246, Y28 VSS_247
part Z pins: AA8 AVSS_15, AA10 AVSS_16, AB6 AVSS_17, AB7 AVSS_18, AB8 AVSS_19, AB10 AVSS_20, AC5 AVSS_21, AC8 AVSS_22, AC10 AVSS_23, AD5 AVSS_24, AD8 AVSS_25, AD10 AVSS_26, AE6 AVSS_27, AE7 AVSS_28, AE9 AVSS_29, AF4 AVSS_30, AF7 AVSS_31, AF8 AVSS_32, AF11 AVSS_33, AF12 AVSS_34, AF13 AVSS_35, AF14 AVSS_36, AF15 AVSS_37, AF16 AVSS_38, AF21 AVSS_39, AG3 AVSS_40, AG6 AVSS_41, AG7 AVSS_42, AG10 AVSS_43, AG12 AVSS_44, AG15 AVSS_45, AG18 AVSS_46, AG21 AVSS_47, AG22 AVSS_48, AH4 AVSS_49, AH8 AVSS_50, AH11 AVSS_51, AH12 AVSS_52, AH15 AVSS_53, AH21 AVSS_54, AH22 AVSS_55, AH23 AVSS_56, AJ3 AVSS_57, AJ7 AVSS_58, AJ8 AVSS_59, AJ9 AVSS_60, AJ11 AVSS_61, AJ12 AVSS_62, AJ15 AVSS_63, AJ16 AVSS_64, AJ18 AVSS_65, AJ21 AVSS_66, AJ22 AVSS_67, AJ23 AVSS_68, AK4 AVSS_69, AK5 AVSS_70, AK7 AVSS_71, AK10 AVSS_72, AK11 AVSS_73, AK12 AVSS_74, AK13 AVSS_75, AK14 AVSS_76, AK23 AVSS_77, AL3 AVSS_78, AL4 AVSS_79, AL5 AVSS_80, AL11 AVSS_81, AL13 AVSS_82, AL23 AVSS_83, AM4 AVSS_84, AM8 AVSS_85, AM9 AVSS_86, AM18 AVSS_87, AM20 AVSS_88, AM22 AVSS_89, AM23 AVSS_90, AM24 AVSS_91, AM26 AVSS_92, AM28 AVSS_93, AN7 AVSS_94, AN12 AVSS_95, AN23 AVSS_96, AN31 AVSS_97, AP1 AVSS_98, AP17 AVSS_99, AP23 AVSS_100, AP34 AVSS_101, H28 AVSS_1, H31 AVSS_2, J27 AVSS_3, J28 AVSS_4, J29 AVSS_5, J32 AVSS_6, K26 AVSS_7, K31 AVSS_8, K32 AVSS_9, L26 AVSS_10, L31 AVSS_11, M26 AVSS_12, M32 AVSS_13, N32 AVSS_14
part A text: DDR_PLL POWER; 0.75V-0.85V; LP4/4X_CKE&LP5_CS & Reset Power; 1.8V; LPDDR4/4X=1.1V; LPDDR5=1.05V; MEMORY INTERFACE POWER; CK Power; LPDDR4/4X=0.6V; LPDDR5=0.5V; DIGITAL CORE POWER; DDR IO POWER; (Except for ck, cke and reset)
part B text: DDR_PLL POWER; LP4/4X_CKE&LP5_CS & Reset Power; 0.75V-0.85V; LPDDR4/4X=1.1V; 1.8V; LPDDR5=1.05V; MEMORY INTERFACE POWER; CK Power; LPDDR4/4X=0.6V; LPDDR5=0.5V; DIGITAL CORE POWER; DDR IO POWER; (Except for ck, cke and reset)
part C text: EMMCIO Domain; Operating Voltage=1.8V
part D text: VCCIO2 Domain; Operating Voltage=1.8V/3.3V
part E text: OSC; PMUIO1 Domain; Operating Voltage=1.8V Only; PLL; PMUIO1/2 Domain Logic Power; Operating Voltage=0.75V
part F text: PMUIO2 Domain; Operating Voltage=1.8V/3.3V
part G text: VCCIO1 Domain; Operating Voltage=1.8V
part H text: VCCIO3 Domain; Operating Voltage=1.8V
part I text: VCCIO4 Domain; Operating Voltage=1.8V/3.3V
part J text: VCCIO5 Domain; Operating Voltage=1.8V/3.3V
part K text: VCCIO6 Domain; Operating Voltage=1.8V/3.3V
part L text: USB2.0 of TYPEC0; (OTG/HOST/DEVICE); HS/FS/LS; Download Port; 40K; USB2.0 of TYPEC1; USB2.0 HOST0; USB2.0 HOST1; USB2.0 POWER
part M text: USB3.0 OTG/DP1.4 Alt; of TYPEC0; USB:U3/Gen1----Controller0; DP:RBR/HBR/HBR2/HBR3; of TYPEC1; USB:U3/Gen1----Controller1
part N text: PCIE20/SATA30 Mux0; input or output; PCIe20x1_2; 1Lane(RC)--4(1L2); MUX; SATA30 HOST; Controller0; PCIE20:Gen1/Gen2; SATA30:Gen1/Gen2/Gen3; PCIE20/SATA30 Mux1; PCIe30x1_0; 1Lane(RC)--2(1L0); Controller1; PCIe30x1_1; 1Lane(RC)--3(1L1); Controller2; USB30 HOST; USB 30:Gen1
part O text: PCIE30X4; PCIE30 PORT0; PCIe30X4; 4Lane(DM)--0(4L); Lane 0; PCIe30x1_0; 1Lane(RC)--2(1L0); Lane 1; PCIE30:; PCIe1.1(2.5Gbps); PCIe2.1(5Gbps); PCIe3.0(8Gbps); PCIE30 PORT1; PCIe30x2; 2Lane(RC)--1(2L); PCIe30x1_1; 1Lane(RC)--3(1L1)
part P text: MIPI DPHY CSI_RX Port0; MIPI V1.2/2.5Gbps; MIPI DPHY CSI_RX Port1
part Q text: MIPI D/C-PHY DSI_TX Port0; D-PHY:V2.0 4.5Gbps/Lane; C-PHY:V1.1 5.7Gbps/Trio; MIPI D/C-PHY CSI_RX Port0; MIPI D/C-PHY POWER
part R text: MIPI D/C-PHY DSI_TX Port1; D-PHY:V2.0 4.5Gbps/Lane; C-PHY:V1.1 5.7Gbps/Trio; MIPI D/C-PHY CSI_RX Port1; MIPI D/C-PHY POWER
part S text: HDMI TX/eDP MUX Port0; HDMI:V2.1 12Gbps; eDP: V1.3 5.4Gbps; HDMI TX/eDP MUX Port1
part T text: HDMI RX; HDMI:V2.0
part U text: SARADC; 12-bit 1MS/s; OTP; TSADC
part V text: GPU; CPU_BIG0; LOGIC; CPU_BIG1; VDENC; LIT(LIT+DSU+L3); NPU

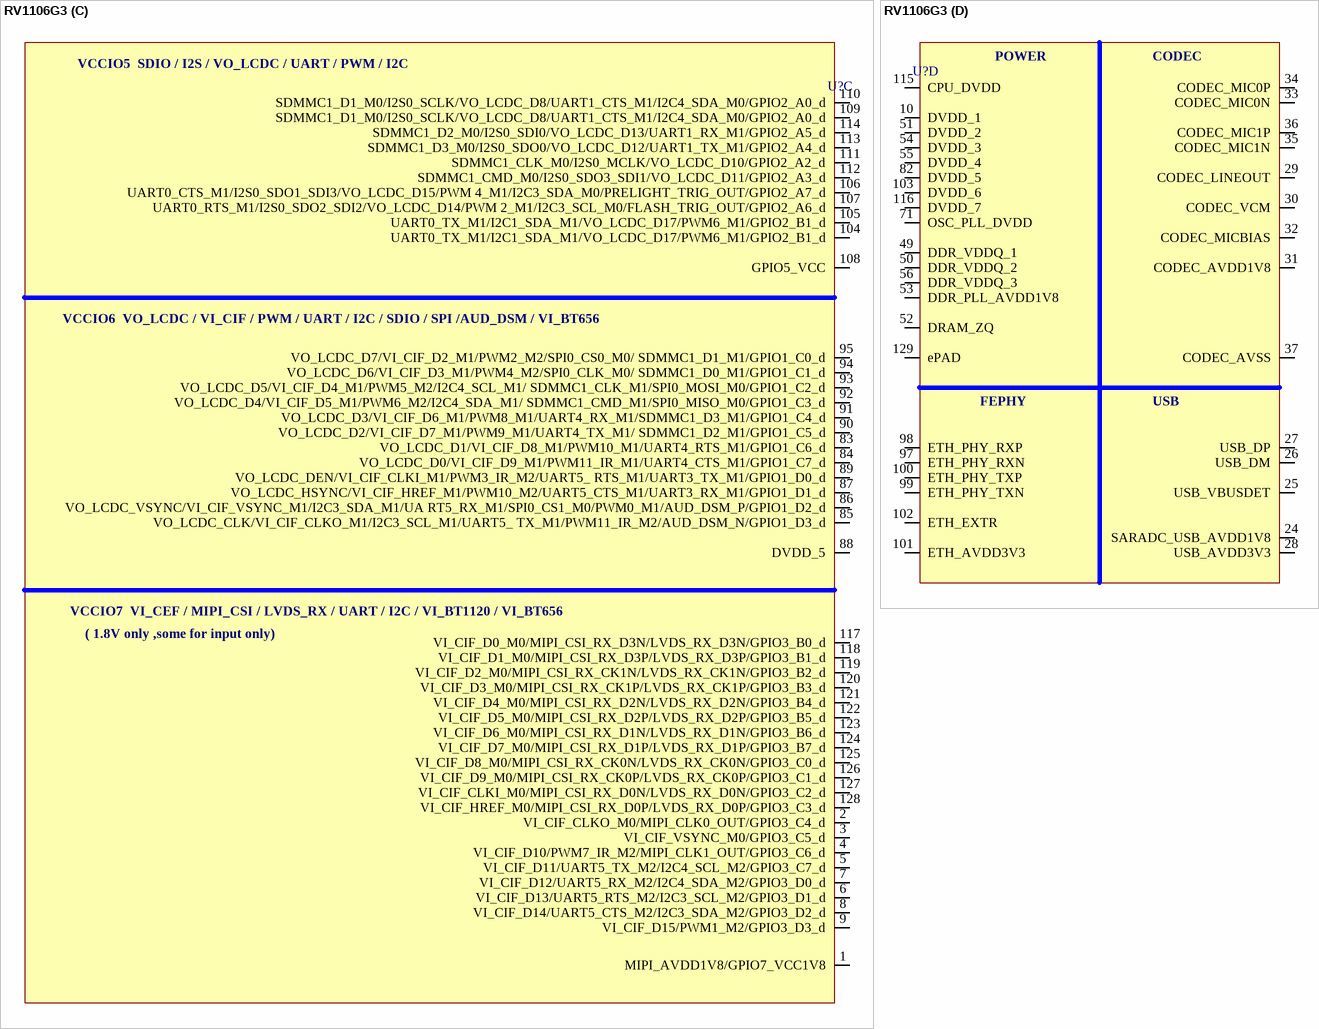
[diagram p26: symbol RV1106G3]

## RV1106G3
designator U?
QFN-128(12.3x12.3) Microcontroller Units (MCUs/MPUs/SOCs) ROHS; Manufacturer: Rockchip; Manufacturer Part Number: RV1106G3; Item Type: IC; Package: QFN-128(12.3x12.3); LCSC Part Number: C5328706; ComponentLink1Description: LCSC; ComponentLink1URL: https://www.lcsc.com/product-detail/Microcontroller-Units-MCUs-MPUs-SOCs_Rockchip-RV1106G3_C5328706.html
footprint QFN-128(12.3x12.3)
part A pins: 19 RTC_AVDD3V3, 20 RTC_XOUT, 21 RTC_XIN, 57 TVSS, 58 UART0_RX_M0/CLK_32K/CLK_REFOUT/RTC_CLKO/GPIO0_A0_z, 59 UART0_TX_M0/PWM2_M0/GPIO0_A1_d, 60 PWM3_IR_M0/GPIO0_A2_d, 61 PMU_VCC3V3, 62 PMIC_PWR_CTRL_M1/GPIO0_A3_u, 63 PMIC_PWR_CTRL_M0/PWM1_M0/GPIO0_A4_d, 64 I2C1_SCL_M0/UART1_RTS_M0/PWM5_M0/GPIO0_A5_d, 65 I2C1_SDA_M0/UART1_CTS_M0/PWM6_M0/GPIO0_A6_d, 66 nPOR, 67 PMU_DVDD0V9, 68 OSC_XIN, 69 OSC_XOUT, 70 OSC_AVDD1V8/PLL_AVDD1V8, 72 UART3_TX_M0/I2C2_SCL_M0/PWM7_IR_M0/GPIO1_A0_d, 73 UART3_RX_M0/I2C2_SDA_M0/PWM4_M0/GPIO1_A1_d, 74 PWM0_M0/CPU_AVS/VI_CIF_D0_M1/GPIO1_A2_d, 75 UART1_TX_M0/I2C0_SCL_M0/GPIO1_A3_d, 76 UART1_RX_M0/I2C0_SDA_M0/GPIO1_A4_d, 77 UART4_RX_M0/PWM3_IR_M1/GPIO1_B0_d, 78 UART4_TX_M0/PWM7_IR_M1/SPI1_CS1_M0/VI_CIF_D1_M1/GPIO1_B1_d, 79 JTAG_CPU_TCK_M1/UART2_TX_M1/JTAG_HPMCU_TCK_ M0/JTAG_LPMCU_TCK_M0/GPIO1_B2_d, 80 JTAG_CPU_TMS_M1/UART2_RX_M1/JTAG_HPMCU_TMS_ M0/JTAG_LPMCU_TMS_M0/GPIO1_B3_u, 81 GPIO1_VCC3V3, 96 VO_LCDC_D2/VI_CIF_D7_M1/PWM9_M1/UART4_TX_M1/ SDMMC1_D2_M1/GPIO1_C5_d
part B pins: 11 SDMMC0_DET/GPIO3_A1_u, 12 SDMMC0_D1/UART2_TX_M0/PWM9_M0/GPIO3_A2_u, 13 GPIO4_VCC, 14 SDMMC0_D0/UART2_RX_M0/PWM8_M0/GPIO3_A3_u, 15 SDMMC0_CLK/UART5_RTS_M0/I2C0_SCL_M2/JTAG_LPMCU_TC K_M1/PWM10_M0/GPIO3_A4_d, 16 SDMMC0_CMD/UART5_CTS_M0/I2C0_SDA_M2/JTAG_LPMCU_T MS_M1/PWM11_IR_M0/GPIO3_A5_u, 17 SDMMC0_D3/UART5_TX_M0/JTAG_CPU_TMS_M0/JTAG_HPMCU_TMS_M1/GPIO3_A6_u, 18 SDMMC0_D2/UART5_RX_M0/JTAG_CPU_TCK_M0/JTAG_HPMCU_TCK_M1/GPIO3_A7_u, 22 RTC_XOUT, 23 RTC_XIN, 38 EMMC_D5/SPI1_CLK_M0/UART1_RX_M2/I2C2_SCL_M1/GPIO4_A7_u, 39 EMMC_D3/FSPI_D3/GPIO4_A6_u, 40 EMMC_D4/SPI1_CS0_M0/UART1_TX_M2/I2C2_SDA_M1/GPIO4_A5_u, 41 EMMC_D0/FSPI_D0/GPIO4_A4_u, 42 EMMC_D1/FSPI_D1/GPIO4_A3_u, 43 GPIO3_VCC, 44 EMMC_D2/FSPI_D2/GPIO4_A2_u, 45 EMMC_D6/SPI1_MOSI_M0/UART0_TX_M2/I2C0_SCL_M1/GPIO4_A1_u, 46 EMMC_D7/SPI1_MISO_M0/UART0_RX_M2/I2C0_SDA_M1/GPIO4_A0_u, 47 EMMC_CMD/FSPI_CS0/GPIO4_B0_u, 48 EMMC_CLK/FSPI_CLK/GPIO4_B1_d
part C pins: 1 MIPI_AVDD1V8/GPIO7_VCC1V8, 2 VI_CIF_CLKO_M0/MIPI_CLK0_OUT/GPIO3_C4_d, 3 VI_CIF_VSYNC_M0/GPIO3_C5_d, 4 VI_CIF_D10/PWM7_IR_M2/MIPI_CLK1_OUT/GPIO3_C6_d, 5 VI_CIF_D11/UART5_TX_M2/I2C4_SCL_M2/GPIO3_C7_d, 6 VI_CIF_D13/UART5_RTS_M2/I2C3_SCL_M2/GPIO3_D1_d, 7 VI_CIF_D12/UART5_RX_M2/I2C4_SDA_M2/GPIO3_D0_d, 8 VI_CIF_D14/UART5_CTS_M2/I2C3_SDA_M2/GPIO3_D2_d, 9 VI_CIF_D15/PWM1_M2/GPIO3_D3_d, 83 VO_LCDC_D1/VI_CIF_D8_M1/PWM10_M1/UART4_RTS_M1/GPIO1_C6_d, 84 VO_LCDC_D0/VI_CIF_D9_M1/PWM11_IR_M1/UART4_CTS_M1/GPIO1_C7_d, 85 VO_LCDC_CLK/VI_CIF_CLKO_M1/I2C3_SCL_M1/UART5_ TX_M1/PWM11_IR_M2/AUD_DSM_N/GPIO1_D3_d, 86 VO_LCDC_VSYNC/VI_CIF_VSYNC_M1/I2C3_SDA_M1/UA RT5_RX_M1/SPI0_CS1_M0/PWM0_M1/AUD_DSM_P/GPIO1_D2_d, 87 VO_LCDC_HSYNC/VI_CIF_HREF_M1/PWM10_M2/UART5_CTS_M1/UART3_RX_M1/GPIO1_D1_d, 88 DVDD_5, 89 VO_LCDC_DEN/VI_CIF_CLKI_M1/PWM3_IR_M2/UART5_ RTS_M1/UART3_TX_M1/GPIO1_D0_d, 90 VO_LCDC_D2/VI_CIF_D7_M1/PWM9_M1/UART4_TX_M1/ SDMMC1_D2_M1/GPIO1_C5_d, 91 VO_LCDC_D3/VI_CIF_D6_M1/PWM8_M1/UART4_RX_M1/SDMMC1_D3_M1/GPIO1_C4_d, 92 VO_LCDC_D4/VI_CIF_D5_M1/PWM6_M2/I2C4_SDA_M1/ SDMMC1_CMD_M1/SPI0_MISO_M0/GPIO1_C3_d, 93 VO_LCDC_D5/VI_CIF_D4_M1/PWM5_M2/I2C4_SCL_M1/ SDMMC1_CLK_M1/SPI0_MOSI_M0/GPIO1_C2_d, 94 VO_LCDC_D6/VI_CIF_D3_M1/PWM4_M2/SPI0_CLK_M0/ SDMMC1_D0_M1/GPIO1_C1_d, 95 VO_LCDC_D7/VI_CIF_D2_M1/PWM2_M2/SPI0_CS0_M0/ SDMMC1_D1_M1/GPIO1_C0_d, 104 UART0_TX_M1/I2C1_SDA_M1/VO_LCDC_D17/PWM6_M1/GPIO2_B1_d, 105 UART0_TX_M1/I2C1_SDA_M1/VO_LCDC_D17/PWM6_M1/GPIO2_B1_d, 106 UART0_CTS_M1/I2S0_SDO1_SDI3/VO_LCDC_D15/PWM 4_M1/I2C3_SDA_M0/PRELIGHT_TRIG_OUT/GPIO2_A7_d, 107 UART0_RTS_M1/I2S0_SDO2_SDI2/VO_LCDC_D14/PWM 2_M1/I2C3_SCL_M0/FLASH_TRIG_OUT/GPIO2_A6_d, 108 GPIO5_VCC, 109 SDMMC1_D1_M0/I2S0_SCLK/VO_LCDC_D8/UART1_CTS_M1/I2C4_SDA_M0/GPIO2_A0_d, 110 SDMMC1_D1_M0/I2S0_SCLK/VO_LCDC_D8/UART1_CTS_M1/I2C4_SDA_M0/GPIO2_A0_d, 111 SDMMC1_CLK_M0/I2S0_MCLK/VO_LCDC_D10/GPIO2_A2_d, 112 SDMMC1_CMD_M0/I2S0_SDO3_SDI1/VO_LCDC_D11/GPIO2_A3_d, 113 SDMMC1_D3_M0/I2S0_SDO0/VO_LCDC_D12/UART1_TX_M1/GPIO2_A4_d, 114 SDMMC1_D2_M0/I2S0_SDI0/VO_LCDC_D13/UART1_RX_M1/GPIO2_A5_d, 117 VI_CIF_D0_M0/MIPI_CSI_RX_D3N/LVDS_RX_D3N/GPIO3_B0_d, 118 VI_CIF_D1_M0/MIPI_CSI_RX_D3P/LVDS_RX_D3P/GPIO3_B1_d, 119 VI_CIF_D2_M0/MIPI_CSI_RX_CK1N/LVDS_RX_CK1N/GPIO3_B2_d, 120 VI_CIF_D3_M0/MIPI_CSI_RX_CK1P/LVDS_RX_CK1P/GPIO3_B3_d, 121 VI_CIF_D4_M0/MIPI_CSI_RX_D2N/LVDS_RX_D2N/GPIO3_B4_d, 122 VI_CIF_D5_M0/MIPI_CSI_RX_D2P/LVDS_RX_D2P/GPIO3_B5_d, 123 VI_CIF_D6_M0/MIPI_CSI_RX_D1N/LVDS_RX_D1N/GPIO3_B6_d, 124 VI_CIF_D7_M0/MIPI_CSI_RX_D1P/LVDS_RX_D1P/GPIO3_B7_d, 125 VI_CIF_D8_M0/MIPI_CSI_RX_CK0N/LVDS_RX_CK0N/GPIO3_C0_d, 126 VI_CIF_D9_M0/MIPI_CSI_RX_CK0P/LVDS_RX_CK0P/GPIO3_C1_d, 127 VI_CIF_CLKI_M0/MIPI_CSI_RX_D0N/LVDS_RX_D0N/GPIO3_C2_d, 128 VI_CIF_HREF_M0/MIPI_CSI_RX_D0P/LVDS_RX_D0P/GPIO3_C3_d
part D pins: 10 DVDD_1, 24 SARADC_USB_AVDD1V8, 25 USB_VBUSDET, 26 USB_DM, 27 USB_DP, 28 USB_AVDD3V3, 29 CODEC_LINEOUT, 30 CODEC_VCM, 31 CODEC_AVDD1V8, 32 CODEC_MICBIAS, 33 CODEC_MIC0N, 34 CODEC_MIC0P, 35 CODEC_MIC1N, 36 CODEC_MIC1P, 37 CODEC_AVSS, 49 DDR_VDDQ_1, 50 DDR_VDDQ_2, 51 DVDD_2, 52 DRAM_ZQ, 53 DDR_PLL_AVDD1V8, 54 DVDD_3, 55 DVDD_4, 56 DDR_VDDQ_3, 71 OSC_PLL_DVDD, 82 DVDD_5, 97 ETH_PHY_RXN, 98 ETH_PHY_RXP, 99 ETH_PHY_TXN, 100 ETH_PHY_TXP, 101 ETH_AVDD3V3, 102 ETH_EXTR, 103 DVDD_6, 115 CPU_DVDD, 116 DVDD_7, 129 ePAD
part A text: OSC / PLL / OTP; RTC; PMU   UART / PWM / I2C ( 3.3V only ); VCCIO1  UART / I2C / PWM / JTAG (3.3V only)
part B text: VCCIO2   SARADC / PWM (1.8V Only); VCCIO2   EMMC / FSPI / UART / I2C / SPI; VCCIO4   SDMMC / UART / JTAG  / PWM / I2C
part C text: VCCIO5  SDIO / I2S / VO_LCDC / UART / PWM / I2C; VCCIO6  VO_LCDC / VI_CIF / PWM / UART / I2C / SDIO / SPI /AUD_DSM / VI_BT656; VCCIO7  VI_CEF / MIPI_CSI / LVDS_RX / UART / I2C / VI_BT1120 / VI_BT656; ( 1.8V only ,some for input only)
part D text: POWER; CODEC; FEPHY; USB

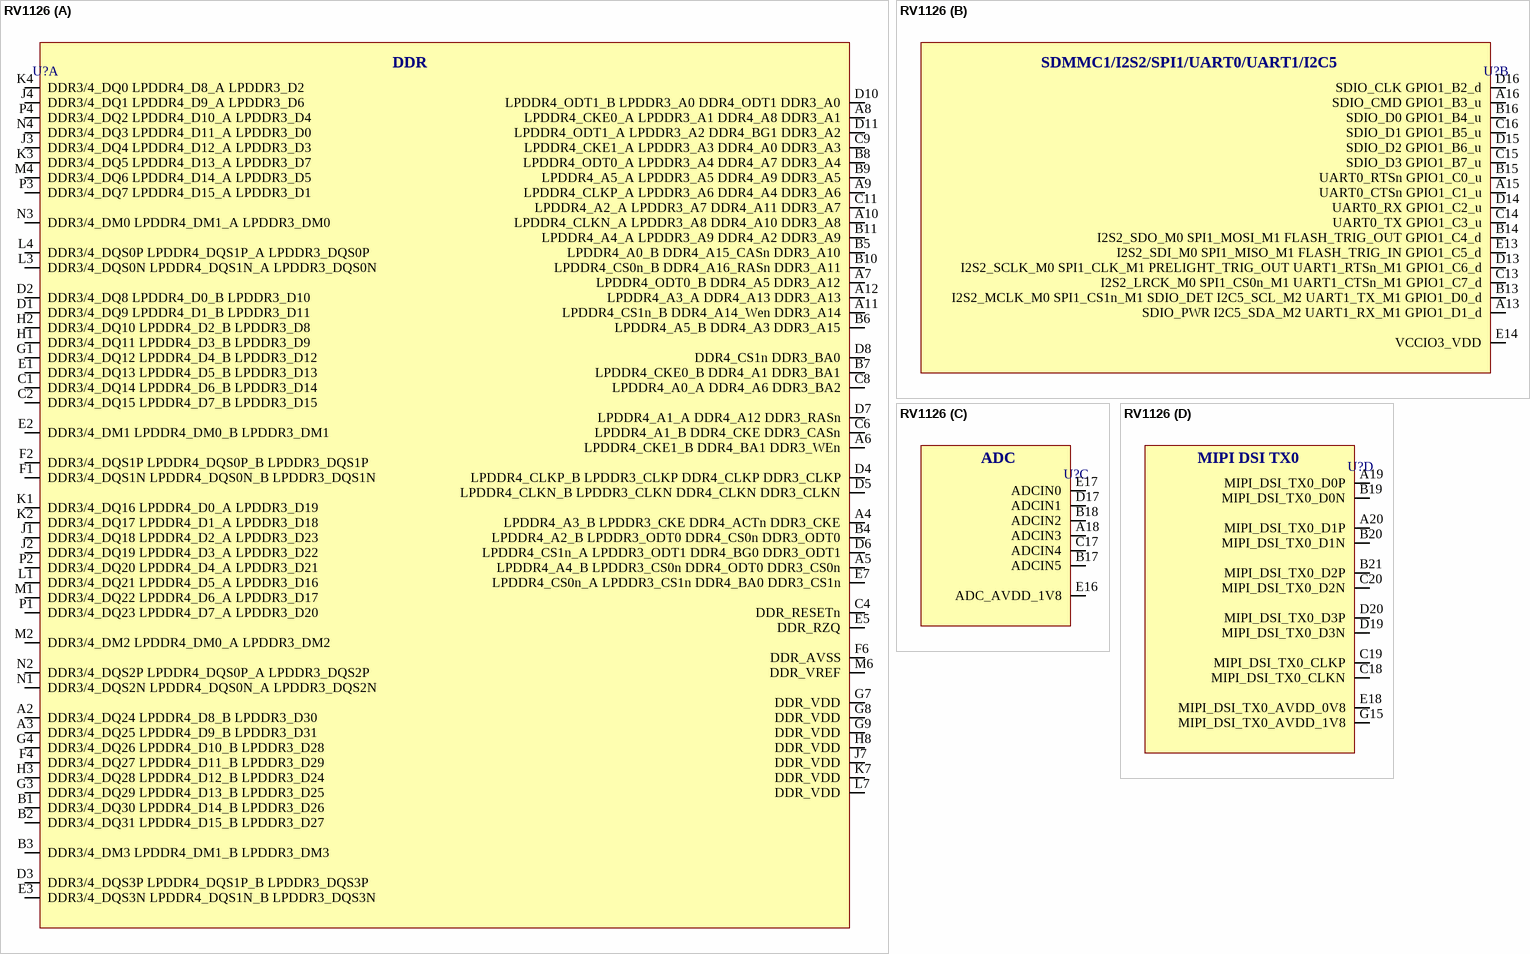
[diagram p27: symbol RV1126]

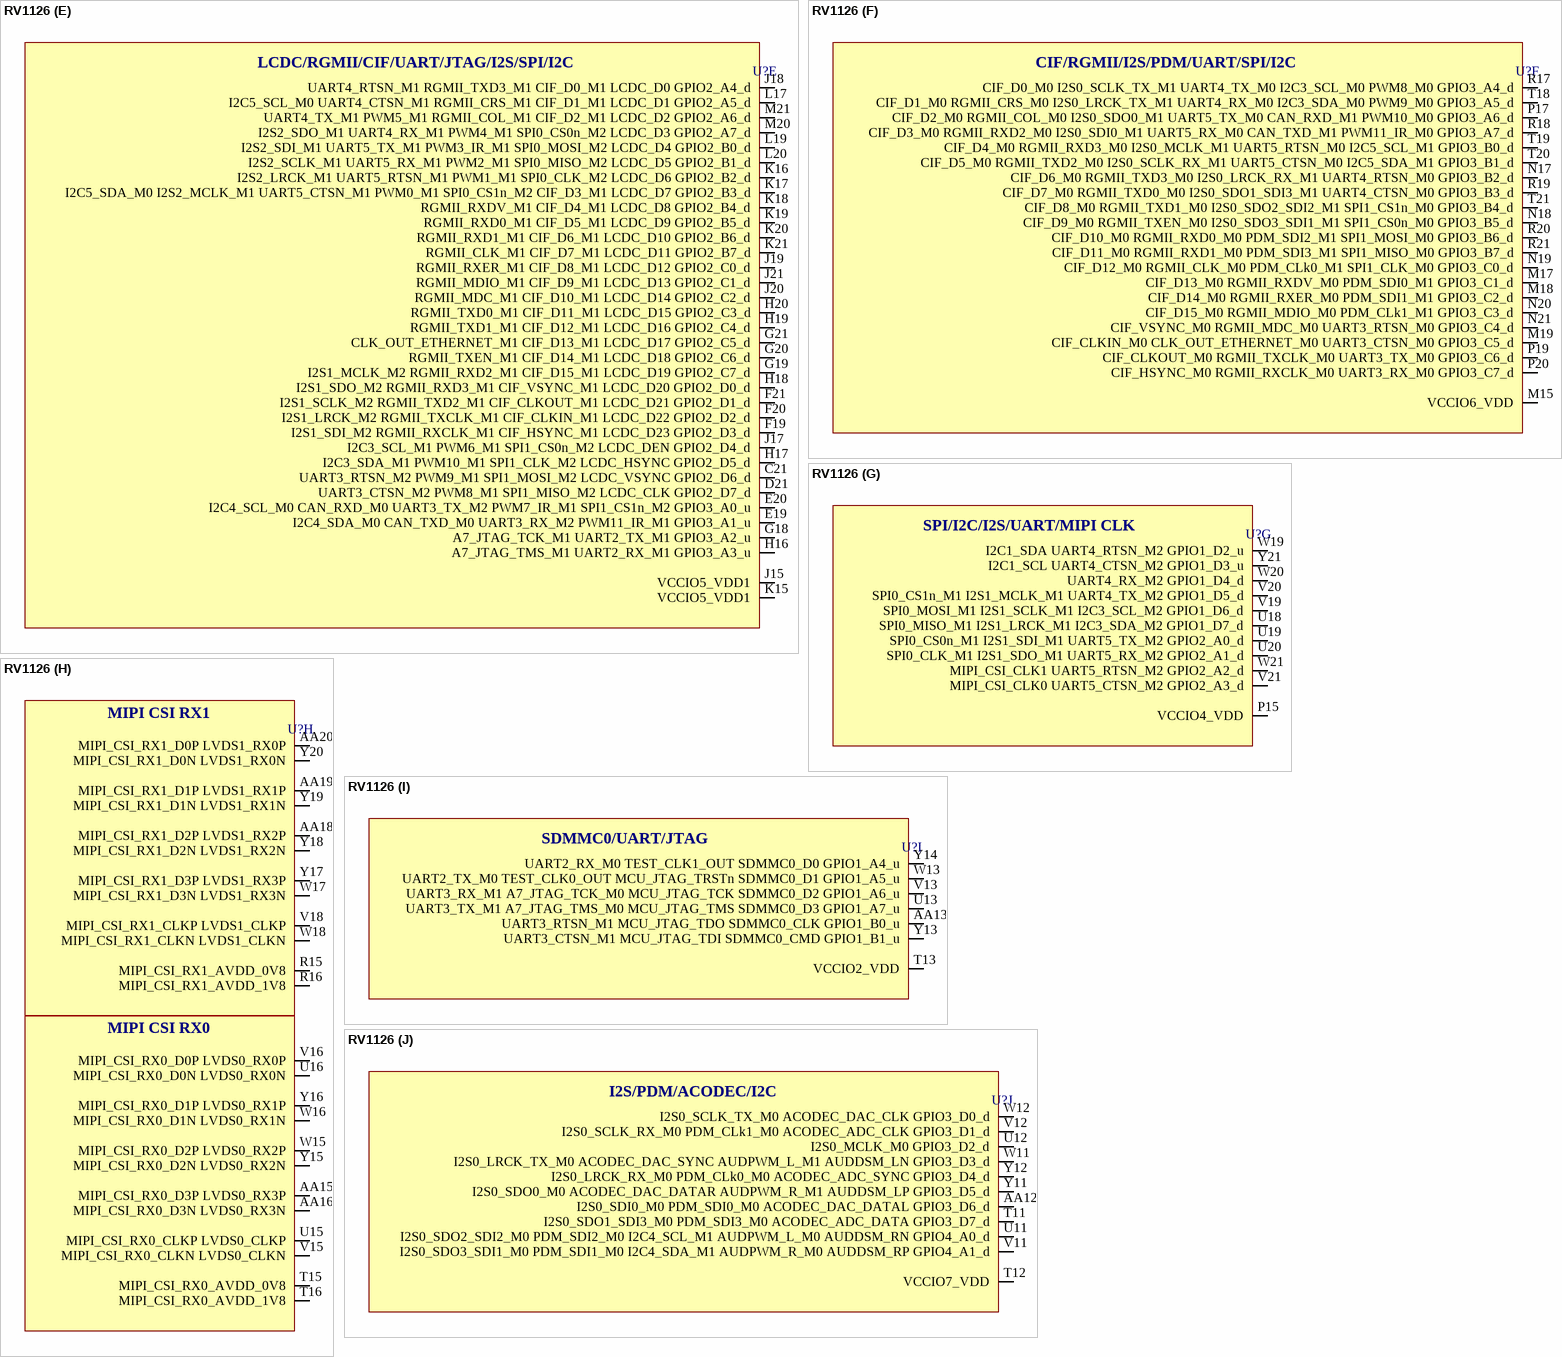
[diagram p28: symbol RV1126]

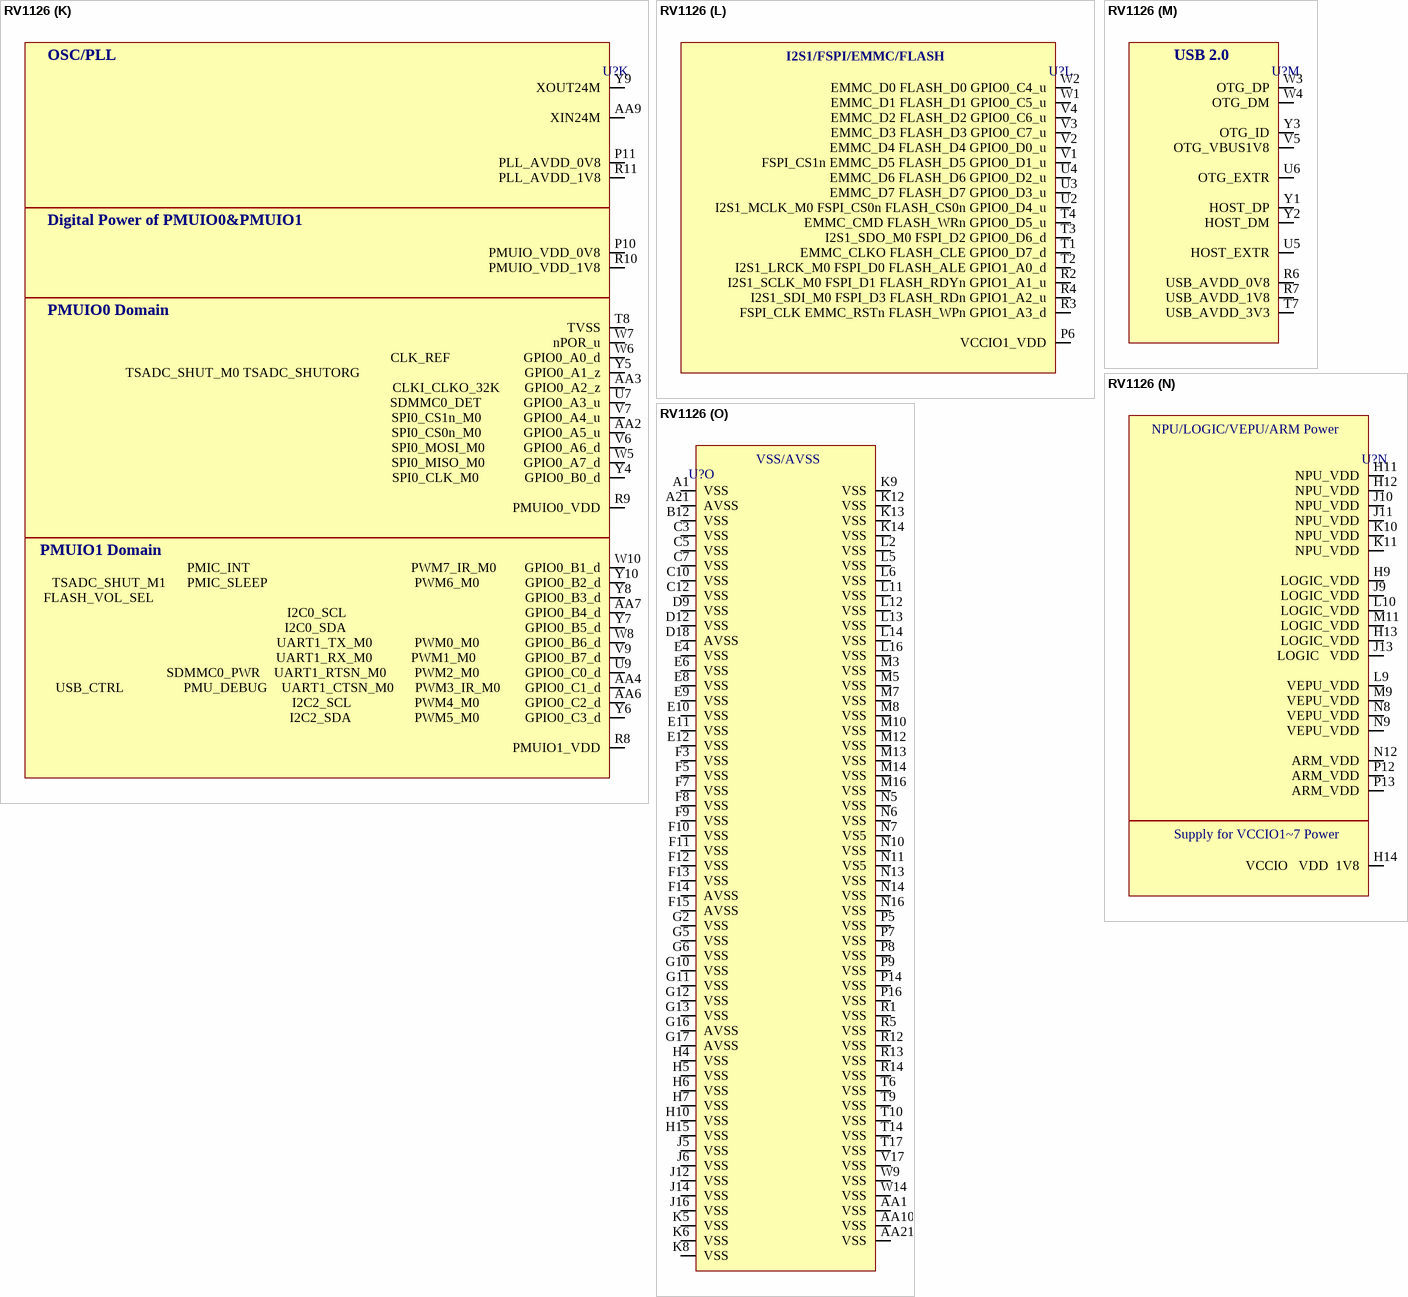
[diagram p29: symbol RV1126]

## RV1126
designator U?
FCCSP-409(14x14) Microcontroller Units (MCUs/MPUs/SOCs) ROHS; Manufacturer: Rockchip; Manufacturer Part Number: RV1126; Package: FCCSP-409(14x14); LCSC Part Number: C2859017; Item Type: Microcontroller; ComponentLink1Description: LCSC; ComponentLink1URL: https://www.lcsc.com/product-detail/Microcontroller-Units-MCUs-MPUs-SOCs_Rockchip-RV1126_C2859017.html
footprint FCCSP-409(14x14)
part A pins: A2 DDR3/4_DQ24 LPDDR4_D8_B LPDDR3_D30, A3 DDR3/4_DQ25 LPDDR4_D9_B LPDDR3_D31, A4 LPDDR4_A3_B LPDDR3_CKE DDR4_ACTn DDR3_CKE, A5 LPDDR4_A4_B LPDDR3_CS0n DDR4_ODT0 DDR3_CS0n, A6 LPDDR4_CKE1_B DDR4_BA1 DDR3_WEn, A7 LPDDR4_ODT0_B DDR4_A5 DDR3_A12, A8 LPDDR4_CKE0_A LPDDR3_A1 DDR4_A8 DDR3_A1, A9 LPDDR4_CLKP_A LPDDR3_A6 DDR4_A4 DDR3_A6, A10 LPDDR4_CLKN_A LPDDR3_A8 DDR4_A10 DDR3_A8, A11 LPDDR4_CS1n_B DDR4_A14_Wen DDR3_A14, A12 LPDDR4_A3_A DDR4_A13 DDR3_A13, B1 DDR3/4_DQ30 LPDDR4_D14_B LPDDR3_D26, B2 DDR3/4_DQ31 LPDDR4_D15_B LPDDR3_D27, B3 DDR3/4_DM3 LPDDR4_DM1_B LPDDR3_DM3, B4 LPDDR4_A2_B LPDDR3_ODT0 DDR4_CS0n DDR3_ODT0, B5 LPDDR4_A0_B DDR4_A15_CASn DDR3_A10, B6 LPDDR4_A5_B DDR4_A3 DDR3_A15, B7 LPDDR4_CKE0_B DDR4_A1 DDR3_BA1, B8 LPDDR4_ODT0_A LPDDR3_A4 DDR4_A7 DDR3_A4, B9 LPDDR4_A5_A LPDDR3_A5 DDR4_A9 DDR3_A5, B10 LPDDR4_CS0n_B DDR4_A16_RASn DDR3_A11, B11 LPDDR4_A4_A LPDDR3_A9 DDR4_A2 DDR3_A9, C1 DDR3/4_DQ14 LPDDR4_D6_B LPDDR3_D14, C2 DDR3/4_DQ15 LPDDR4_D7_B LPDDR3_D15, C4 DDR_RESETn, C6 LPDDR4_A1_B DDR4_CKE DDR3_CASn, C8 LPDDR4_A0_A DDR4_A6 DDR3_BA2, C9 LPDDR4_CKE1_A LPDDR3_A3 DDR4_A0 DDR3_A3, C11 LPDDR4_A2_A LPDDR3_A7 DDR4_A11 DDR3_A7, D1 DDR3/4_DQ9 LPDDR4_D1_B LPDDR3_D11, D2 DDR3/4_DQ8 LPDDR4_D0_B LPDDR3_D10, D3 DDR3/4_DQS3P LPDDR4_DQS1P_B LPDDR3_DQS3P, D4 LPDDR4_CLKP_B LPDDR3_CLKP DDR4_CLKP DDR3_CLKP, D5 LPDDR4_CLKN_B LPDDR3_CLKN DDR4_CLKN DDR3_CLKN, D6 LPDDR4_CS1n_A LPDDR3_ODT1 DDR4_BG0 DDR3_ODT1, D7 LPDDR4_A1_A DDR4_A12 DDR3_RASn, D8 DDR4_CS1n DDR3_BA0, D10 LPDDR4_ODT1_B LPDDR3_A0 DDR4_ODT1 DDR3_A0, D11 LPDDR4_ODT1_A LPDDR3_A2 DDR4_BG1 DDR3_A2, E1 DDR3/4_DQ13 LPDDR4_D5_B LPDDR3_D13, E2 DDR3/4_DM1 LPDDR4_DM0_B LPDDR3_DM1, E3 DDR3/4_DQS3N LPDDR4_DQS1N_B LPDDR3_DQS3N, E5 DDR_RZQ, E7 LPDDR4_CS0n_A LPDDR3_CS1n DDR4_BA0 DDR3_CS1n, F1 DDR3/4_DQS1N LPDDR4_DQS0N_B LPDDR3_DQS1N, F2 DDR3/4_DQS1P LPDDR4_DQS0P_B LPDDR3_DQS1P, F4 DDR3/4_DQ27 LPDDR4_D11_B LPDDR3_D29, F6 DDR_AVSS, G1 DDR3/4_DQ12 LPDDR4_D4_B LPDDR3_D12, G3 DDR3/4_DQ29 LPDDR4_D13_B LPDDR3_D25, G4 DDR3/4_DQ26 LPDDR4_D10_B LPDDR3_D28, G7 DDR_VDD, G8 DDR_VDD, G9 DDR_VDD, H1 DDR3/4_DQ11 LPDDR4_D3_B LPDDR3_D9, H2 DDR3/4_DQ10 LPDDR4_D2_B LPDDR3_D8, H3 DDR3/4_DQ28 LPDDR4_D12_B LPDDR3_D24, H8 DDR_VDD, J1 DDR3/4_DQ18 LPDDR4_D2_A LPDDR3_D23, J2 DDR3/4_DQ19 LPDDR4_D3_A LPDDR3_D22, J3 DDR3/4_DQ4 LPDDR4_D12_A LPDDR3_D3, J4 DDR3/4_DQ1 LPDDR4_D9_A LPDDR3_D6, J7 DDR_VDD, K1 DDR3/4_DQ16 LPDDR4_D0_A LPDDR3_D19, K2 DDR3/4_DQ17 LPDDR4_D1_A LPDDR3_D18, K3 DDR3/4_DQ5 LPDDR4_D13_A LPDDR3_D7, K4 DDR3/4_DQ0 LPDDR4_D8_A LPDDR3_D2, K7 DDR_VDD, L1 DDR3/4_DQ21 LPDDR4_D5_A LPDDR3_D16, L3 DDR3/4_DQS0N LPDDR4_DQS1N_A LPDDR3_DQS0N, L4 DDR3/4_DQS0P LPDDR4_DQS1P_A LPDDR3_DQS0P, L7 DDR_VDD, M1 DDR3/4_DQ22 LPDDR4_D6_A LPDDR3_D17, M2 DDR3/4_DM2 LPDDR4_DM0_A LPDDR3_DM2, M4 DDR3/4_DQ6 LPDDR4_D14_A LPDDR3_D5, M6 DDR_VREF, N1 DDR3/4_DQS2N LPDDR4_DQS0N_A LPDDR3_DQS2N, N2 DDR3/4_DQS2P LPDDR4_DQS0P_A LPDDR3_DQS2P, N3 DDR3/4_DM0 LPDDR4_DM1_A LPDDR3_DM0, N4 DDR3/4_DQ3 LPDDR4_D11_A LPDDR3_D0, P1 DDR3/4_DQ23 LPDDR4_D7_A LPDDR3_D20, P2 DDR3/4_DQ20 LPDDR4_D4_A LPDDR3_D21, P3 DDR3/4_DQ7 LPDDR4_D15_A LPDDR3_D1, P4 DDR3/4_DQ2 LPDDR4_D10_A LPDDR3_D4
part B pins: A13 SDIO_PWR I2C5_SDA_M2 UART1_RX_M1 GPIO1_D1_d, A15 UART0_CTSn GPIO1_C1_u, A16 SDIO_CMD GPIO1_B3_u, B13 I2S2_MCLK_M0 SPI1_CS1n_M1 SDIO_DET I2C5_SCL_M2 UART1_TX_M1 GPIO1_D0_d, B14 I2S2_SDO_M0 SPI1_MOSI_M1 FLASH_TRIG_OUT GPIO1_C4_d, B15 UART0_RTSn GPIO1_C0_u, B16 SDIO_D0 GPIO1_B4_u, C13 I2S2_LRCK_M0 SPI1_CS0n_M1 UART1_CTSn_M1 GPIO1_C7_d, C14 UART0_TX GPIO1_C3_u, C15 SDIO_D3 GPIO1_B7_u, C16 SDIO_D1 GPIO1_B5_u, D13 I2S2_SCLK_M0 SPI1_CLK_M1 PRELIGHT_TRIG_OUT UART1_RTSn_M1 GPIO1_C6_d, D14 UART0_RX GPIO1_C2_u, D15 SDIO_D2 GPIO1_B6_u, D16 SDIO_CLK GPIO1_B2_d, E13 I2S2_SDI_M0 SPI1_MISO_M1 FLASH_TRIG_IN GPIO1_C5_d, E14 VCCIO3_VDD
part C pins: A18 ADCIN3, B17 ADCIN5, B18 ADCIN2, C17 ADCIN4, D17 ADCIN1, E16 ADC_AVDD_1V8, E17 ADCIN0
part D pins: A19 MIPI_DSI_TX0_D0P, A20 MIPI_DSI_TX0_D1P, B19 MIPI_DSI_TX0_D0N, B20 MIPI_DSI_TX0_D1N, B21 MIPI_DSI_TX0_D2P, C18 MIPI_DSI_TX0_CLKN, C19 MIPI_DSI_TX0_CLKP, C20 MIPI_DSI_TX0_D2N, D19 MIPI_DSI_TX0_D3N, D20 MIPI_DSI_TX0_D3P, E18 MIPI_DSI_TX0_AVDD_0V8, G15 MIPI_DSI_TX0_AVDD_1V8
part E pins: C21 UART3_RTSN_M2 PWM9_M1 SPI1_MOSI_M2 LCDC_VSYNC GPIO2_D6_d, D21 UART3_CTSN_M2 PWM8_M1 SPI1_MISO_M2 LCDC_CLK GPIO2_D7_d, E19 I2C4_SDA_M0 CAN_TXD_M0 UART3_RX_M2 PWM11_IR_M1 GPIO3_A1_u, E20 I2C4_SCL_M0 CAN_RXD_M0 UART3_TX_M2 PWM7_IR_M1 SPI1_CS1n_M2 GPIO3_A0_u, F19 I2S1_SDI_M2 RGMII_RXCLK_M1 CIF_HSYNC_M1 LCDC_D23 GPIO2_D3_d, F20 I2S1_LRCK_M2 RGMII_TXCLK_M1 CIF_CLKIN_M1 LCDC_D22 GPIO2_D2_d, F21 I2S1_SCLK_M2 RGMII_TXD2_M1 CIF_CLKOUT_M1 LCDC_D21 GPIO2_D1_d, G18 A7_JTAG_TCK_M1 UART2_TX_M1 GPIO3_A2_u, G19 I2S1_MCLK_M2 RGMII_RXD2_M1 CIF_D15_M1 LCDC_D19 GPIO2_C7_d, G20 RGMII_TXEN_M1 CIF_D14_M1 LCDC_D18 GPIO2_C6_d, G21 CLK_OUT_ETHERNET_M1 CIF_D13_M1 LCDC_D17 GPIO2_C5_d, H16 A7_JTAG_TMS_M1 UART2_RX_M1 GPIO3_A3_u, H17 I2C3_SDA_M1 PWM10_M1 SPI1_CLK_M2 LCDC_HSYNC GPIO2_D5_d, H18 I2S1_SDO_M2 RGMII_RXD3_M1 CIF_VSYNC_M1 LCDC_D20 GPIO2_D0_d, H19 RGMII_TXD1_M1 CIF_D12_M1 LCDC_D16 GPIO2_C4_d, H20 RGMII_TXD0_M1 CIF_D11_M1 LCDC_D15 GPIO2_C3_d, J15 VCCIO5_VDD1, J17 I2C3_SCL_M1 PWM6_M1 SPI1_CS0n_M2 LCDC_DEN GPIO2_D4_d, J18 UART4_RTSN_M1 RGMII_TXD3_M1 CIF_D0_M1 LCDC_D0 GPIO2_A4_d, J19 RGMII_RXER_M1 CIF_D8_M1 LCDC_D12 GPIO2_C0_d, J20 RGMII_MDC_M1 CIF_D10_M1 LCDC_D14 GPIO2_C2_d, J21 RGMII_MDIO_M1 CIF_D9_M1 LCDC_D13 GPIO2_C1_d, K15 VCCIO5_VDD1, K16 I2S2_LRCK_M1 UART5_RTSN_M1 PWM1_M1 SPI0_CLK_M2 LCDC_D6 GPIO2_B2_d, K17 I2C5_SDA_M0 I2S2_MCLK_M1 UART5_CTSN_M1 PWM0_M1 SPI0_CS1n_M2 CIF_D3_M1 LCDC_D7 GPIO2_B3_d, K18 RGMII_RXDV_M1 CIF_D4_M1 LCDC_D8 GPIO2_B4_d, K19 RGMII_RXD0_M1 CIF_D5_M1 LCDC_D9 GPIO2_B5_d, K20 RGMII_RXD1_M1 CIF_D6_M1 LCDC_D10 GPIO2_B6_d, K21 RGMII_CLK_M1 CIF_D7_M1 LCDC_D11 GPIO2_B7_d, L17 I2C5_SCL_M0 UART4_CTSN_M1 RGMII_CRS_M1 CIF_D1_M1 LCDC_D1 GPIO2_A5_d, L19 I2S2_SDI_M1 UART5_TX_M1 PWM3_IR_M1 SPI0_MOSI_M2 LCDC_D4 GPIO2_B0_d, L20 I2S2_SCLK_M1 UART5_RX_M1 PWM2_M1 SPI0_MISO_M2 LCDC_D5 GPIO2_B1_d, M20 I2S2_SDO_M1 UART4_RX_M1 PWM4_M1 SPI0_CS0n_M2 LCDC_D3 GPIO2_A7_d, M21 UART4_TX_M1 PWM5_M1 RGMII_COL_M1 CIF_D2_M1 LCDC_D2 GPIO2_A6_d
part F pins: M15 VCCIO6_VDD, M17 CIF_D13_M0 RGMII_RXDV_M0 PDM_SDI0_M1 GPIO3_C1_d, M18 CIF_D14_M0 RGMII_RXER_M0 PDM_SDI1_M1 GPIO3_C2_d, M19 CIF_CLKIN_M0 CLK_OUT_ETHERNET_M0 UART3_CTSN_M0 GPIO3_C5_d, N17 CIF_D6_M0 RGMII_TXD3_M0 I2S0_LRCK_RX_M1 UART4_RTSN_M0 GPIO3_B2_d, N18 CIF_D9_M0 RGMII_TXEN_M0 I2S0_SDO3_SDI1_M1 SPI1_CS0n_M0 GPIO3_B5_d, N19 CIF_D12_M0 RGMII_CLK_M0 PDM_CLk0_M1 SPI1_CLK_M0 GPIO3_C0_d, N20 CIF_D15_M0 RGMII_MDIO_M0 PDM_CLk1_M1 GPIO3_C3_d, N21 CIF_VSYNC_M0 RGMII_MDC_M0 UART3_RTSN_M0 GPIO3_C4_d, P17 CIF_D2_M0 RGMII_COL_M0 I2S0_SDO0_M1 UART5_TX_M0 CAN_RXD_M1 PWM10_M0 GPIO3_A6_d, P19 CIF_CLKOUT_M0 RGMII_TXCLK_M0 UART3_TX_M0 GPIO3_C6_d, P20 CIF_HSYNC_M0 RGMII_RXCLK_M0 UART3_RX_M0 GPIO3_C7_d, R17 CIF_D0_M0 I2S0_SCLK_TX_M1 UART4_TX_M0 I2C3_SCL_M0 PWM8_M0 GPIO3_A4_d, R18 CIF_D3_M0 RGMII_RXD2_M0 I2S0_SDI0_M1 UART5_RX_M0 CAN_TXD_M1 PWM11_IR_M0 GPIO3_A7_d, R19 CIF_D7_M0 RGMII_TXD0_M0 I2S0_SDO1_SDI3_M1 UART4_CTSN_M0 GPIO3_B3_d, R20 CIF_D10_M0 RGMII_RXD0_M0 PDM_SDI2_M1 SPI1_MOSI_M0 GPIO3_B6_d, R21 CIF_D11_M0 RGMII_RXD1_M0 PDM_SDI3_M1 SPI1_MISO_M0 GPIO3_B7_d, T18 CIF_D1_M0 RGMII_CRS_M0 I2S0_LRCK_TX_M1 UART4_RX_M0 I2C3_SDA_M0 PWM9_M0 GPIO3_A5_d, T19 CIF_D4_M0 RGMII_RXD3_M0 I2S0_MCLK_M1 UART5_RTSN_M0 I2C5_SCL_M1 GPIO3_B0_d, T20 CIF_D5_M0 RGMII_TXD2_M0 I2S0_SCLK_RX_M1 UART5_CTSN_M0 I2C5_SDA_M1 GPIO3_B1_d, T21 CIF_D8_M0 RGMII_TXD1_M0 I2S0_SDO2_SDI2_M1 SPI1_CS1n_M0 GPIO3_B4_d
part G pins: P15 VCCIO4_VDD, U18 SPI0_MISO_M1 I2S1_LRCK_M1 I2C3_SDA_M2 GPIO1_D7_d, U19 SPI0_CS0n_M1 I2S1_SDI_M1 UART5_TX_M2 GPIO2_A0_d, U20 SPI0_CLK_M1 I2S1_SDO_M1 UART5_RX_M2 GPIO2_A1_d, V19 SPI0_MOSI_M1 I2S1_SCLK_M1 I2C3_SCL_M2 GPIO1_D6_d, V20 SPI0_CS1n_M1 I2S1_MCLK_M1 UART4_TX_M2 GPIO1_D5_d, V21 MIPI_CSI_CLK0 UART5_CTSN_M2 GPIO2_A3_d, W19 I2C1_SDA UART4_RTSN_M2 GPIO1_D2_u, W20 UART4_RX_M2 GPIO1_D4_d, W21 MIPI_CSI_CLK1 UART5_RTSN_M2 GPIO2_A2_d, Y21 I2C1_SCL UART4_CTSN_M2 GPIO1_D3_u
part H pins: AA15 MIPI_CSI_RX0_D3P LVDS0_RX3P, AA16 MIPI_CSI_RX0_D3N LVDS0_RX3N, AA18 MIPI_CSI_RX1_D2P LVDS1_RX2P, AA19 MIPI_CSI_RX1_D1P LVDS1_RX1P, AA20 MIPI_CSI_RX1_D0P LVDS1_RX0P, R15 MIPI_CSI_RX1_AVDD_0V8, R16 MIPI_CSI_RX1_AVDD_1V8, T15 MIPI_CSI_RX0_AVDD_0V8, T16 MIPI_CSI_RX0_AVDD_1V8, U15 MIPI_CSI_RX0_CLKP LVDS0_CLKP, U16 MIPI_CSI_RX0_D0N LVDS0_RX0N, V15 MIPI_CSI_RX0_CLKN LVDS0_CLKN, V16 MIPI_CSI_RX0_D0P LVDS0_RX0P, V18 MIPI_CSI_RX1_CLKP LVDS1_CLKP, W15 MIPI_CSI_RX0_D2P LVDS0_RX2P, W16 MIPI_CSI_RX0_D1N LVDS0_RX1N, W17 MIPI_CSI_RX1_D3N LVDS1_RX3N, W18 MIPI_CSI_RX1_CLKN LVDS1_CLKN, Y15 MIPI_CSI_RX0_D2N LVDS0_RX2N, Y16 MIPI_CSI_RX0_D1P LVDS0_RX1P, Y17 MIPI_CSI_RX1_D3P LVDS1_RX3P, Y18 MIPI_CSI_RX1_D2N LVDS1_RX2N, Y19 MIPI_CSI_RX1_D1N LVDS1_RX1N, Y20 MIPI_CSI_RX1_D0N LVDS1_RX0N
part I pins: AA13 UART3_RTSN_M1 MCU_JTAG_TDO SDMMC0_CLK GPIO1_B0_u, T13 VCCIO2_VDD, U13 UART3_TX_M1 A7_JTAG_TMS_M0 MCU_JTAG_TMS SDMMC0_D3 GPIO1_A7_u, V13 UART3_RX_M1 A7_JTAG_TCK_M0 MCU_JTAG_TCK SDMMC0_D2 GPIO1_A6_u, W13 UART2_TX_M0 TEST_CLK0_OUT MCU_JTAG_TRSTn SDMMC0_D1 GPIO1_A5_u, Y13 UART3_CTSN_M1 MCU_JTAG_TDI SDMMC0_CMD GPIO1_B1_u, Y14 UART2_RX_M0 TEST_CLK1_OUT SDMMC0_D0 GPIO1_A4_u
part J pins: AA12 I2S0_SDI0_M0 PDM_SDI0_M0 ACODEC_DAC_DATAL GPIO3_D6_d, T11 I2S0_SDO1_SDI3_M0 PDM_SDI3_M0 ACODEC_ADC_DATA GPIO3_D7_d, T12 VCCIO7_VDD, U11 I2S0_SDO2_SDI2_M0 PDM_SDI2_M0 I2C4_SCL_M1 AUDPWM_L_M0 AUDDSM_RN GPIO4_A0_d, U12 I2S0_MCLK_M0 GPIO3_D2_d, V11 I2S0_SDO3_SDI1_M0 PDM_SDI1_M0 I2C4_SDA_M1 AUDPWM_R_M0 AUDDSM_RP GPIO4_A1_d, V12 I2S0_SCLK_RX_M0 PDM_CLk1_M0 ACODEC_ADC_CLK GPIO3_D1_d, W11 I2S0_LRCK_TX_M0 ACODEC_DAC_SYNC AUDPWM_L_M1 AUDDSM_LN GPIO3_D3_d, W12 I2S0_SCLK_TX_M0 ACODEC_DAC_CLK GPIO3_D0_d, Y11 I2S0_SDO0_M0 ACODEC_DAC_DATAR AUDPWM_R_M1 AUDDSM_LP GPIO3_D5_d, Y12 I2S0_LRCK_RX_M0 PDM_CLk0_M0 ACODEC_ADC_SYNC GPIO3_D4_d
part K pins: AA2 SPI0_CS0n_M0            GPIO0_A5_u, AA3 CLKI_CLKO_32K       GPIO0_A2_z, AA4 USB_CTRL                 PMU_DEBUG    UART1_CTSN_M0      PWM3_IR_M0       GPIO0_C1_d, AA6 I2C2_SCL                  PWM4_M0             GPIO0_C2_d, AA7 I2C0_SCL                                                   GPIO0_B4_d, AA9 XIN24M, P10 PMUIO_VDD_0V8, P11 PLL_AVDD_0V8, R8 PMUIO1_VDD, R9 PMUIO0_VDD, R10 PMUIO_VDD_1V8, R11 PLL_AVDD_1V8, T8 TVSS, U7 SDMMC0_DET            GPIO0_A3_u, U9 SDMMC0_PWR    UART1_RTSN_M0        PWM2_M0             GPIO0_C0_d, V6 SPI0_MOSI_M0           GPIO0_A6_d, V7 SPI0_CS1n_M0            GPIO0_A4_u, V9 UART1_RX_M0           PWM1_M0              GPIO0_B7_d, W5 SPI0_MISO_M0           GPIO0_A7_d, W6 CLK_REF                     GPIO0_A0_d, W7 nPOR_u, W8 UART1_TX_M0            PWM0_M0             GPIO0_B6_d, W10 PMIC_INT                                              PWM7_IR_M0        GPIO0_B1_d, Y4 SPI0_CLK_M0             GPIO0_B0_d, Y5 TSADC_SHUT_M0 TSADC_SHUTORG                                               GPIO0_A1_z, Y6 I2C2_SDA                  PWM5_M0             GPIO0_C3_d, Y7 I2C0_SDA                                                   GPIO0_B5_d, Y8 FLASH_VOL_SEL                                                                                                          GPIO0_B3_d, Y9 XOUT24M, Y10 TSADC_SHUT_M1      PMIC_SLEEP                                          PWM6_M0             GPIO0_B2_d
part L pins: P6 VCCIO1_VDD, R2 I2S1_SCLK_M0 FSPI_D1 FLASH_RDYn GPIO1_A1_u, R3 FSPI_CLK EMMC_RSTn FLASH_WPn GPIO1_A3_d, R4 I2S1_SDI_M0 FSPI_D3 FLASH_RDn GPIO1_A2_u, T1 EMMC_CLKO FLASH_CLE GPIO0_D7_d, T2 I2S1_LRCK_M0 FSPI_D0 FLASH_ALE GPIO1_A0_d, T3 I2S1_SDO_M0 FSPI_D2 GPIO0_D6_d, T4 EMMC_CMD FLASH_WRn GPIO0_D5_u, U2 I2S1_MCLK_M0 FSPI_CS0n FLASH_CS0n GPIO0_D4_u, U3 EMMC_D7 FLASH_D7 GPIO0_D3_u, U4 EMMC_D6 FLASH_D6 GPIO0_D2_u, V1 FSPI_CS1n EMMC_D5 FLASH_D5 GPIO0_D1_u, V2 EMMC_D4 FLASH_D4 GPIO0_D0_u, V3 EMMC_D3 FLASH_D3 GPIO0_C7_u, V4 EMMC_D2 FLASH_D2 GPIO0_C6_u, W1 EMMC_D1 FLASH_D1 GPIO0_C5_u, W2 EMMC_D0 FLASH_D0 GPIO0_C4_u
part M pins: R6 USB_AVDD_0V8, R7 USB_AVDD_1V8, T7 USB_AVDD_3V3, U5 HOST_EXTR, U6 OTG_EXTR, V5 OTG_VBUS1V8, W3 OTG_DP, W4 OTG_DM, Y1 HOST_DP, Y2 HOST_DM, Y3 OTG_ID
part N pins: H9 LOGIC_VDD, H11 NPU_VDD, H12 NPU_VDD, H13 LOGIC_VDD, H14 VCCIO   VDD  1V8, J9 LOGIC_VDD, J10 NPU_VDD, J11 NPU_VDD, J13 LOGIC   VDD, K10 NPU_VDD, K11 NPU_VDD, L9 VEPU_VDD, L10 LOGIC_VDD, M9 VEPU_VDD, M11 LOGIC_VDD, N8 VEPU_VDD, N9 VEPU_VDD, N12 ARM_VDD, P12 ARM_VDD, P13 ARM_VDD
part O pins: A1 VSS, A21 AVSS, AA1 VSS, AA10 VSS, AA21 VSS, B12 VSS, C3 VSS, C5 VSS, C7 VSS, C10 VSS, C12 VSS, D9 VSS, D12 VSS, D18 AVSS, E4 VSS, E6 VSS, E8 VSS, E9 VSS, E10 VSS, E11 VSS, E12 VSS, F3 VSS, F5 VSS, F7 VSS, F8 VSS, F9 VSS, F10 VSS, F11 VSS, F12 VSS, F13 VSS, F14 AVSS, F15 AVSS, G2 VSS, G5 VSS, G6 VSS, G10 VSS, G11 VSS, G12 VSS, G13 VSS, G16 AVSS, G17 AVSS, H4 VSS, H5 VSS, H6 VSS, H7 VSS, H10 VSS, H15 VSS, J5 VSS, J6 VSS, J12 VSS, J14 VSS, J16 VSS, K5 VSS, K6 VSS, K8 VSS, K9 VSS, K12 VSS, K13 VSS, K14 VSS, L2 VSS, L5 VSS, L6 VSS, L11 VSS, L12 VSS, L13 VSS, L14 VSS, L16 VSS, M3 VSS, M5 VSS, M7 VSS, M8 VSS, M10 VSS, M12 VSS, M13 VSS, M14 VSS, M16 VSS, N5 VSS, N6 VSS, N7 VS5, N10 VSS, N11 VS5, N13 VSS, N14 VSS, N16 VSS, P5 VSS, P7 VSS, P8 VSS, P9 VSS, P14 VSS, P16 VSS, R1 VSS, R5 VSS, R12 VSS, R13 VSS, R14 VSS, T6 VSS, T9 VSS, T10 VSS, T14 VSS, T17 VSS, V17 VSS, W9 VSS, W14 VSS
part A text: DDR
part B text: SDMMC1/I2S2/SPI1/UART0/UART1/I2C5
part C text: ADC
part D text: MIPI DSI TX0
part E text: LCDC/RGMII/CIF/UART/JTAG/I2S/SPI/I2C
part F text: CIF/RGMII/I2S/PDM/UART/SPI/I2C
part G text: SPI/I2C/I2S/UART/MIPI CLK
part H text: MIPI CSI RX1; MIPI CSI RX0
part I text: SDMMC0/UART/JTAG
part J text: I2S/PDM/ACODEC/I2C
part K text: OSC/PLL; Digital Power of PMUIO0&PMUIO1; PMUIO0 Domain; PMUIO1 Domain
part L text: I2S1/FSPI/EMMC/FLASH
part M text: USB 2.0
part N text: NPU/LOGIC/VEPU/ARM Power; Supply for VCCIO1~7 Power
part O text: VSS/AVSS